# Altium integrated library Ali-padash.IntLib: 1012 symbols (part 3 of 5)
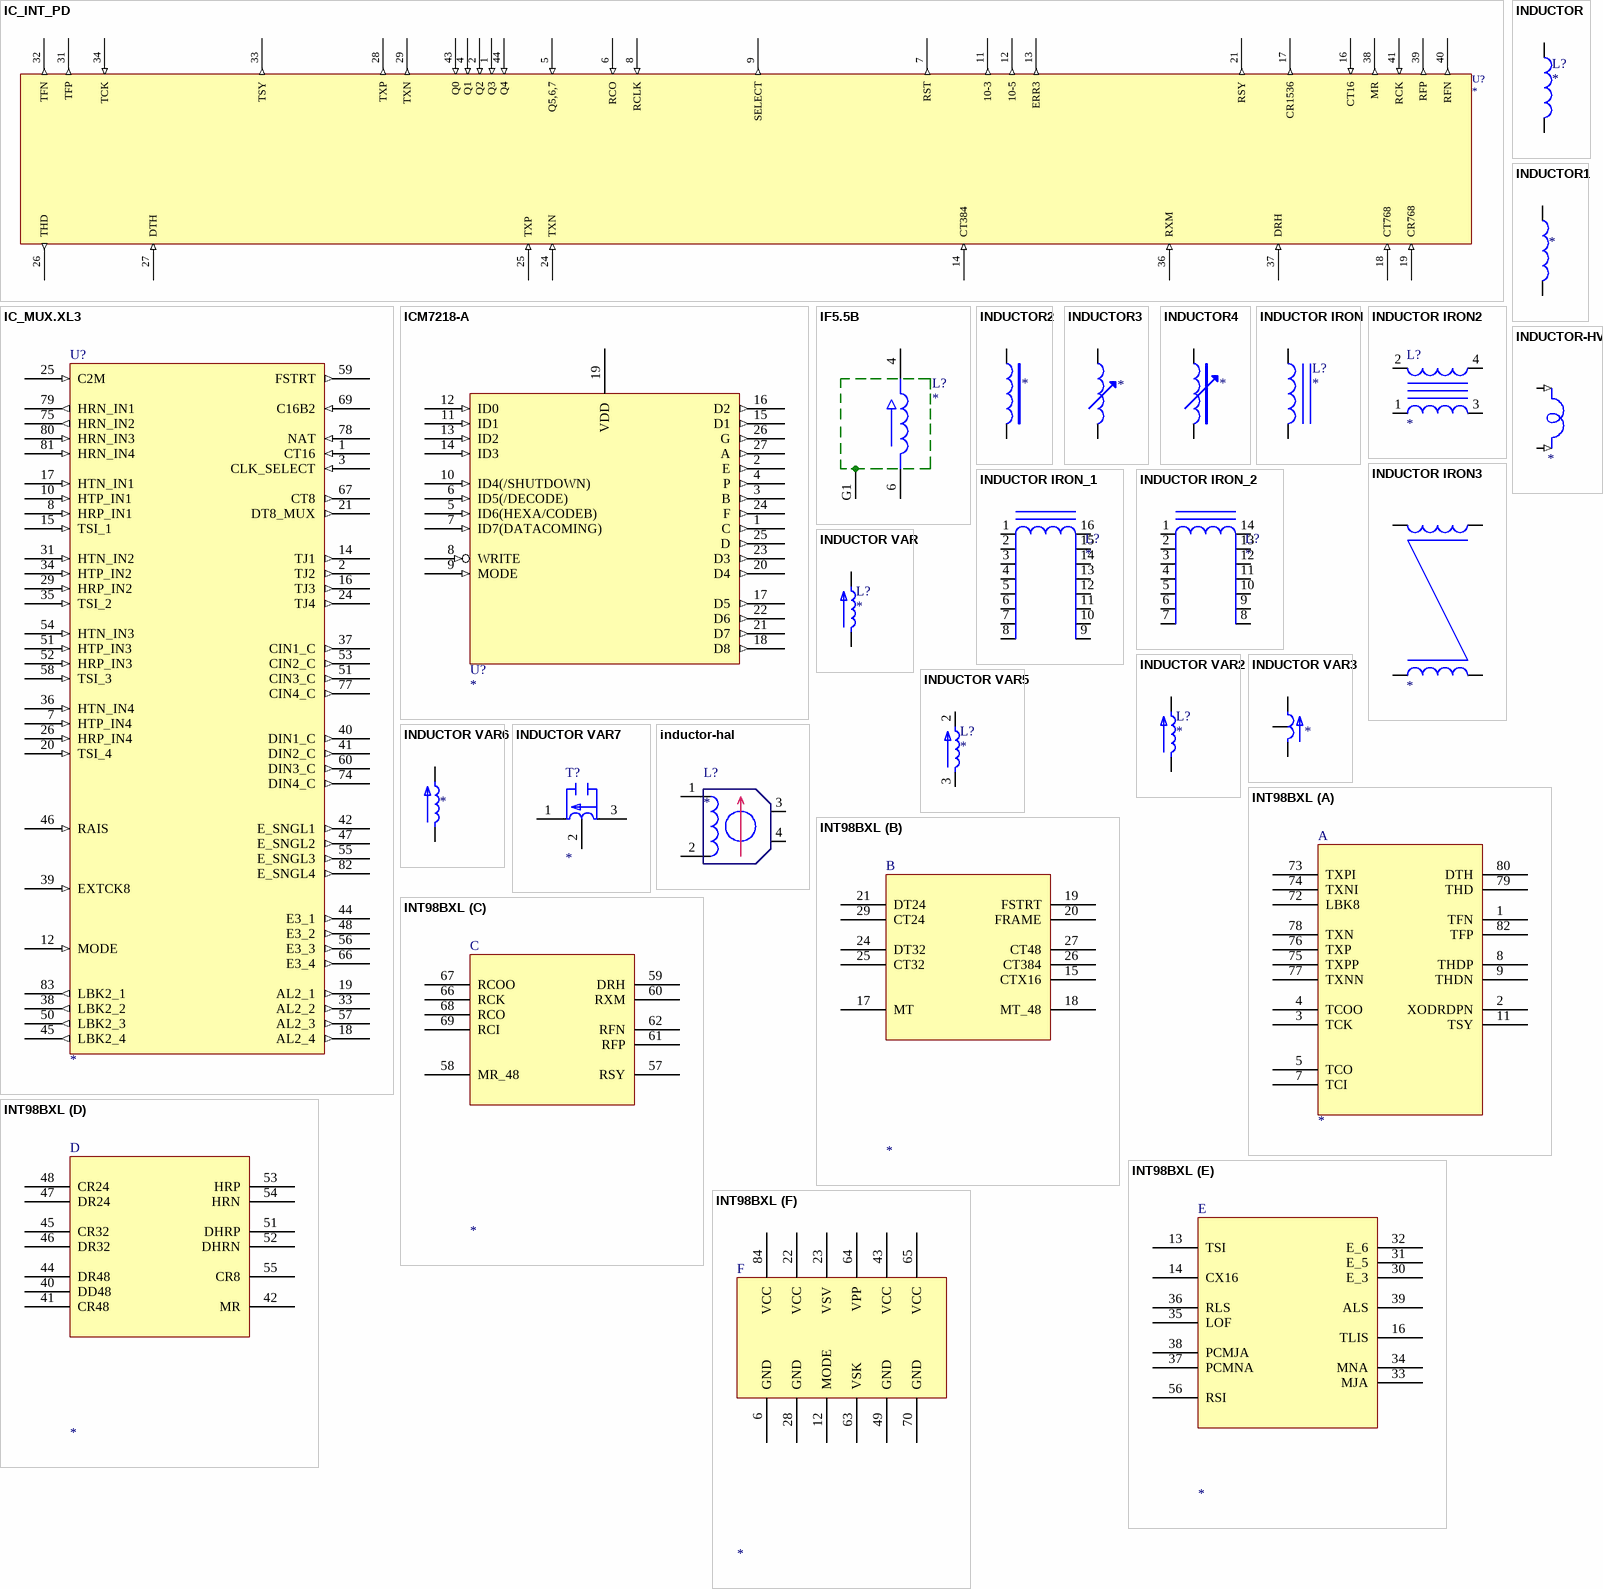
[diagram p81: symbols IC_INT_PD to INT98BXL]

## ICM7218-A
designator U?
pins: 1 C (out), 2 E (out), 3 B (out), 4 P (out), 5 ID6(HEXA/CODEB) (in), 6 ID5(/DECODE) (in), 7 ID7(DATACOMING) (in), 8 WRITE (in), 9 MODE (in), 10 ID4(/SHUTDOWN) (in), 11 ID1 (in), 12 ID0 (in), 13 ID2 (in), 14 ID3 (in), 15 D1 (out), 16 D2 (out), 17 D5 (out), 18 D8 (out), 19 VDD, 20 D4 (out), 21 D7 (out), 22 D6 (out), 23 D3 (out), 24 F (out), 25 D (out), 26 G (out), 27 A (out), 28 VSS (power) hidden to VSS

## IF5.5B
designator L?
pins: 4, 6, G1 GND

## INDUCTOR
designator L?
footprint AXIAL0.3
footprint AXIAL0.4
footprint BEAD
pins: 1, 2

## INDUCTOR1
designator ?
pins: 1, 2

## INDUCTOR2
designator ?
pins: 1, 2

## INDUCTOR3
designator ?
pins: 1, 2

## INDUCTOR4
designator ?
pins: 1, 2

## INDUCTOR IRON
designator L?
pins: 1, 2

## INDUCTOR IRON2
designator L?
pins: 1, 2, 3, 4

## INDUCTOR IRON3
designator ?
pins: 1, 2, 3, 4

## INDUCTOR IRON_1
designator L?
pins: 1, 2, 3, 4, 5, 6, 7, 8, 9, 10, 11, 12, 13, 14, 15, 16

## INDUCTOR IRON_2
designator L?
pins: 1, 2, 3, 4, 5, 6, 7, 8, 9, 10, 11, 12, 13, 14

## INDUCTOR VAR
designator L?
pins: 1, 2

## INDUCTOR VAR2
designator L?
pins: 1, 3

## INDUCTOR VAR3
designator ?
pins: 1, 2, 3

## INDUCTOR VAR5
designator L?
pins: 2, 3

## INDUCTOR VAR6
designator ?
pins: 4, 6

## INDUCTOR VAR7
designator T?
Toko
pins: 1, 2, 3

## inductor-hal
designator L?
footprint tak17
pins: 1, 2, 3, 4

## INDUCTOR-HV
designator ?
pins: 1 (in), 2 (in)

## INT98BXL
designator ?
part A pins: 1 TFN, 2 XODRDPN, 3 TCK, 4 TCOO, 5 TCO, 7 TCI, 8 THDP, 9 THDN, 11 TSY, 72 LBK8, 73 TXPI, 74 TXNI, 75 TXPP, 76 TXP, 77 TXNN, 78 TXN, 79 THD, 80 DTH, 82 TFP
part B pins: 15 CTX16, 17 MT, 18 MT_48, 19 FSTRT, 20 FRAME, 21 DT24, 24 DT32, 25 CT32, 26 CT384, 27 CT48, 29 CT24
part C pins: 57 RSY, 58 MR_48, 59 DRH, 60 RXM, 61 RFP, 62 RFN, 66 RCK, 67 RCOO, 68 RCO, 69 RCI
part D pins: 40 DD48, 41 CR48, 42 MR, 44 DR48, 45 CR32, 46 DR32, 47 DR24, 48 CR24, 51 DHRP, 52 DHRN, 53 HRP, 54 HRN, 55 CR8
part E pins: 13 TSI, 14 CX16, 16 TLIS, 30 E_3, 31 E_5, 32 E_6, 33 MJA, 34 MNA, 35 LOF, 36 RLS, 37 PCMNA, 38 PCMJA, 39 ALS, 56 RSI
part F pins: 6 GND, 12 MODE, 22 VCC, 23 VSV, 28 GND, 43 VCC, 49 GND, 63 VSK, 64 VPP, 65 VCC, 70 GND, 84 VCC

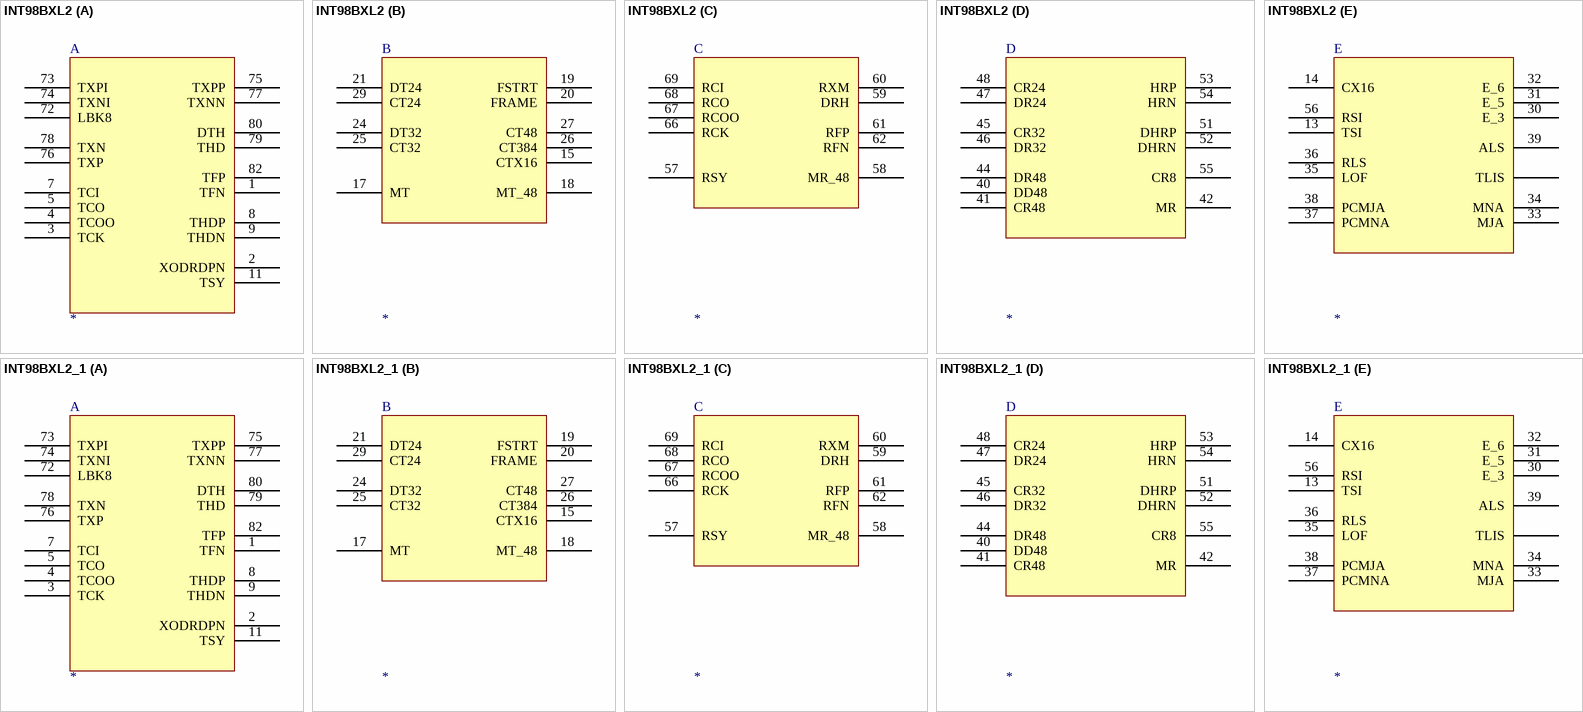
[diagram p31: symbols INT98BXL2 to INT98BXL2_1]

## INT98BXL2
designator ?
part A pins: 1 TFN, 2 XODRDPN, 3 TCK, 4 TCOO, 5 TCO, 7 TCI, 8 THDP, 9 THDN, 11 TSY, 72 LBK8, 73 TXPI, 74 TXNI, 75 TXPP, 76 TXP, 77 TXNN, 78 TXN, 79 THD, 80 DTH, 82 TFP
part B pins: 15 CTX16, 17 MT, 18 MT_48, 19 FSTRT, 20 FRAME, 21 DT24, 24 DT32, 25 CT32, 26 CT384, 27 CT48, 29 CT24
part C pins: 57 RSY, 58 MR_48, 59 DRH, 60 RXM, 61 RFP, 62 RFN, 66 RCK, 67 RCOO, 68 RCO, 69 RCI
part D pins: 40 DD48, 41 CR48, 42 MR, 44 DR48, 45 CR32, 46 DR32, 47 DR24, 48 CR24, 51 DHRP, 52 DHRN, 53 HRP, 54 HRN, 55 CR8
part E pins: 13 TSI, 14 CX16, 30 E_3, 31 E_5, 32 E_6, 33 MJA, 34 MNA, 35 LOF, 36 RLS, 37 PCMNA, 38 PCMJA, 39 ALS, 56 RSI, ? TLIS

## INT98BXL2_1
designator ?
part A pins: 1 TFN, 2 XODRDPN, 3 TCK, 4 TCOO, 5 TCO, 7 TCI, 8 THDP, 9 THDN, 11 TSY, 72 LBK8, 73 TXPI, 74 TXNI, 75 TXPP, 76 TXP, 77 TXNN, 78 TXN, 79 THD, 80 DTH, 82 TFP
part B pins: 15 CTX16, 17 MT, 18 MT_48, 19 FSTRT, 20 FRAME, 21 DT24, 24 DT32, 25 CT32, 26 CT384, 27 CT48, 29 CT24
part C pins: 57 RSY, 58 MR_48, 59 DRH, 60 RXM, 61 RFP, 62 RFN, 66 RCK, 67 RCOO, 68 RCO, 69 RCI
part D pins: 40 DD48, 41 CR48, 42 MR, 44 DR48, 45 CR32, 46 DR32, 47 DR24, 48 CR24, 51 DHRP, 52 DHRN, 53 HRP, 54 HRN, 55 CR8
part E pins: 13 TSI, 14 CX16, 30 E_3, 31 E_5, 32 E_6, 33 MJA, 34 MNA, 35 LOF, 36 RLS, 37 PCMNA, 38 PCMJA, 39 ALS, 56 RSI, ? TLIS

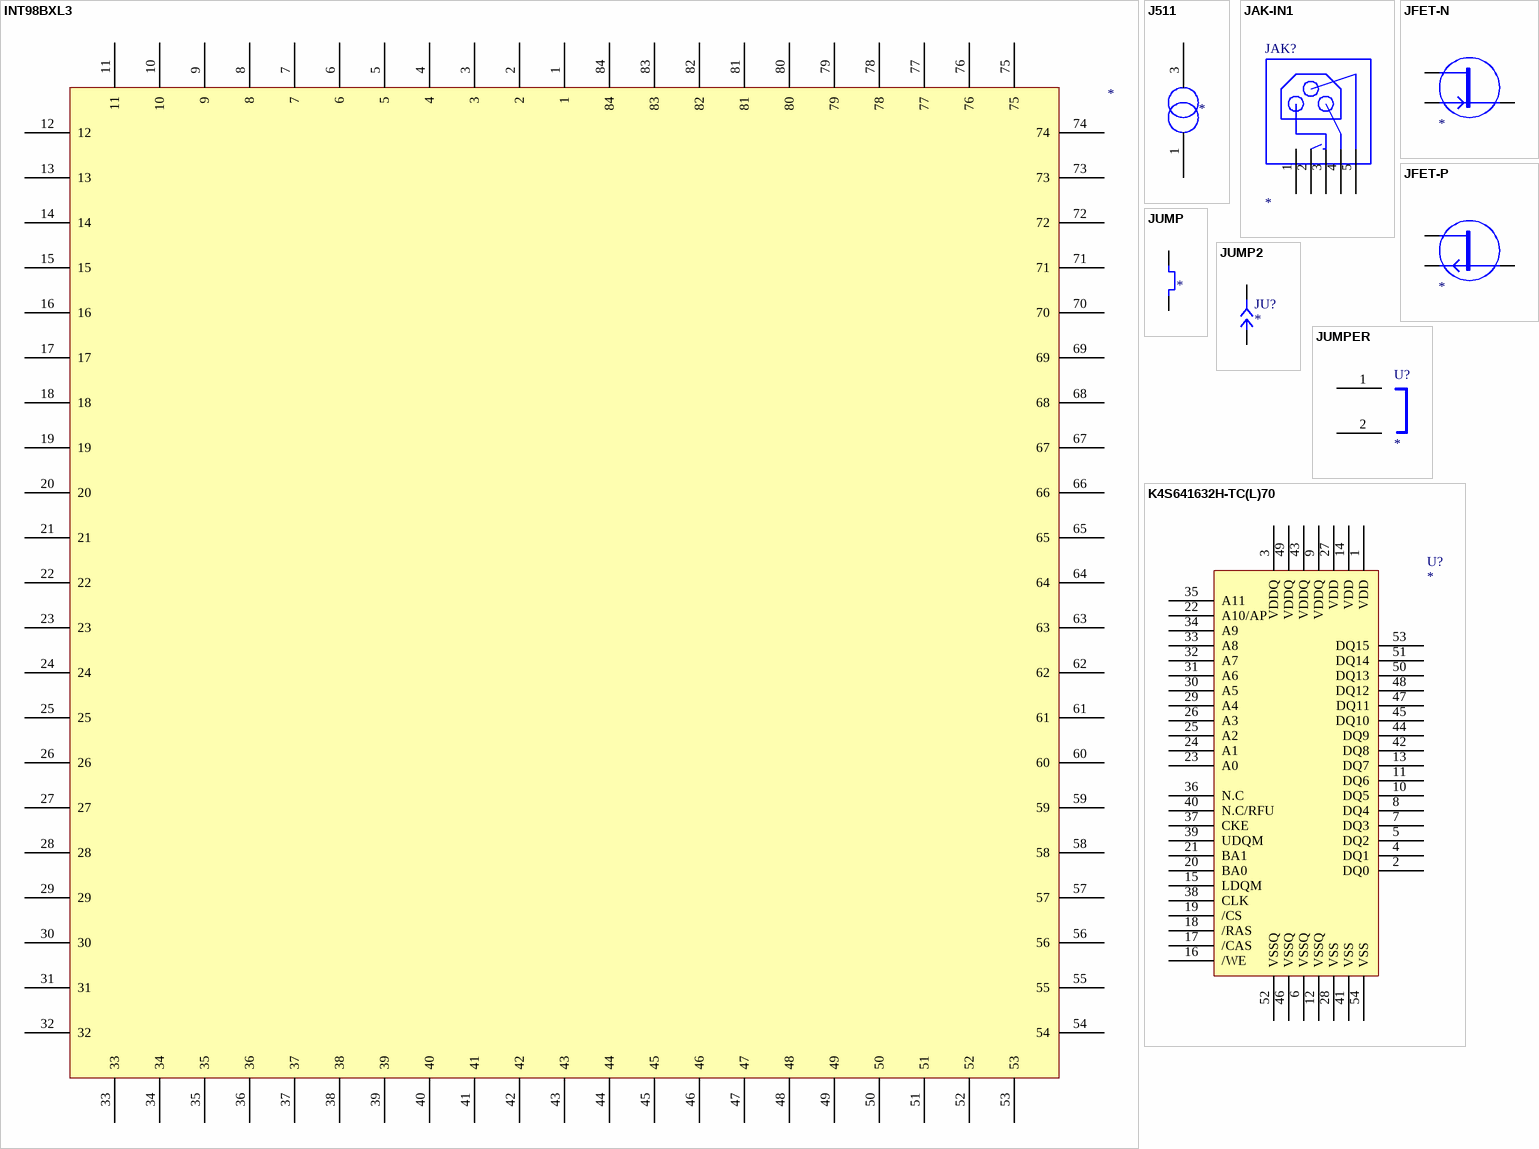
[diagram p32: symbols INT98BXL3 to K4S641632H-TC(L)70]

## INT98BXL3
designator ?
pins: 1, 2, 3, 4, 5, 6, 7, 8, 9, 10, 11, 12, 13, 14, 15, 16, 17, 18, 19, 20, 21, 22, 23, 24, 25, 26, 27, 28, 29, 30, 31, 32, 33, 34, 35, 36, 37, 38, 39, 40, 41, 42, 43, 44, 45, 46, 47, 48, 49, 50, 51, 52, 53, 54, 55, 56, 57, 58, 59, 60, 61, 62, 63, 64, 65, 66, 67, 68, 69, 70, 71, 72, 73, 74, 75, 76, 77, 78, 79, 80, 81, 82, 83, 84

## J511
designator ?
pins: 1, 3

## JAK-IN1
designator JAK?
footprint JAK-PWR1
pins: 1, 2, 3, 4, 5

## JFET-N
designator ?
pins: 1, 2, 3

## JFET-P
designator ?
pins: 1, 2, 3

## JUMP
designator ?
pins: 1, 2

## JUMP2
designator JU?
footprint JUMP3
footprint JUMP2
pins: 1, 2

## JUMPER
designator U?
footprint RAD0.2
pins: 1, 2

## K4S641632H-TC(L)70
designator U?
footprint TSOP54
pins: 1 VDD, 2 DQ0, 3 VDDQ, 4 DQ1, 5 DQ2, 6 VSSQ, 7 DQ3, 8 DQ4, 9 VDDQ, 10 DQ5, 11 DQ6, 12 VSSQ, 13 DQ7, 14 VDD, 15 LDQM, 16 /WE, 17 /CAS, 18 /RAS, 19 /CS, 20 BA0, 21 BA1, 22 A10/AP, 23 A0, 24 A1, 25 A2, 26 A3, 27 VDD, 28 VSS, 29 A4, 30 A5, 31 A6, 32 A7, 33 A8, 34 A9, 35 A11, 36 N.C, 37 CKE, 38 CLK, 39 UDQM, 40 N.C/RFU, 41 VSS, 42 DQ8, 43 VDDQ, 44 DQ9, 45 DQ10, 46 VSSQ, 47 DQ11, 48 DQ12, 49 VDDQ, 50 DQ13, 51 DQ14, 52 VSSQ, 53 DQ15, 54 VSS

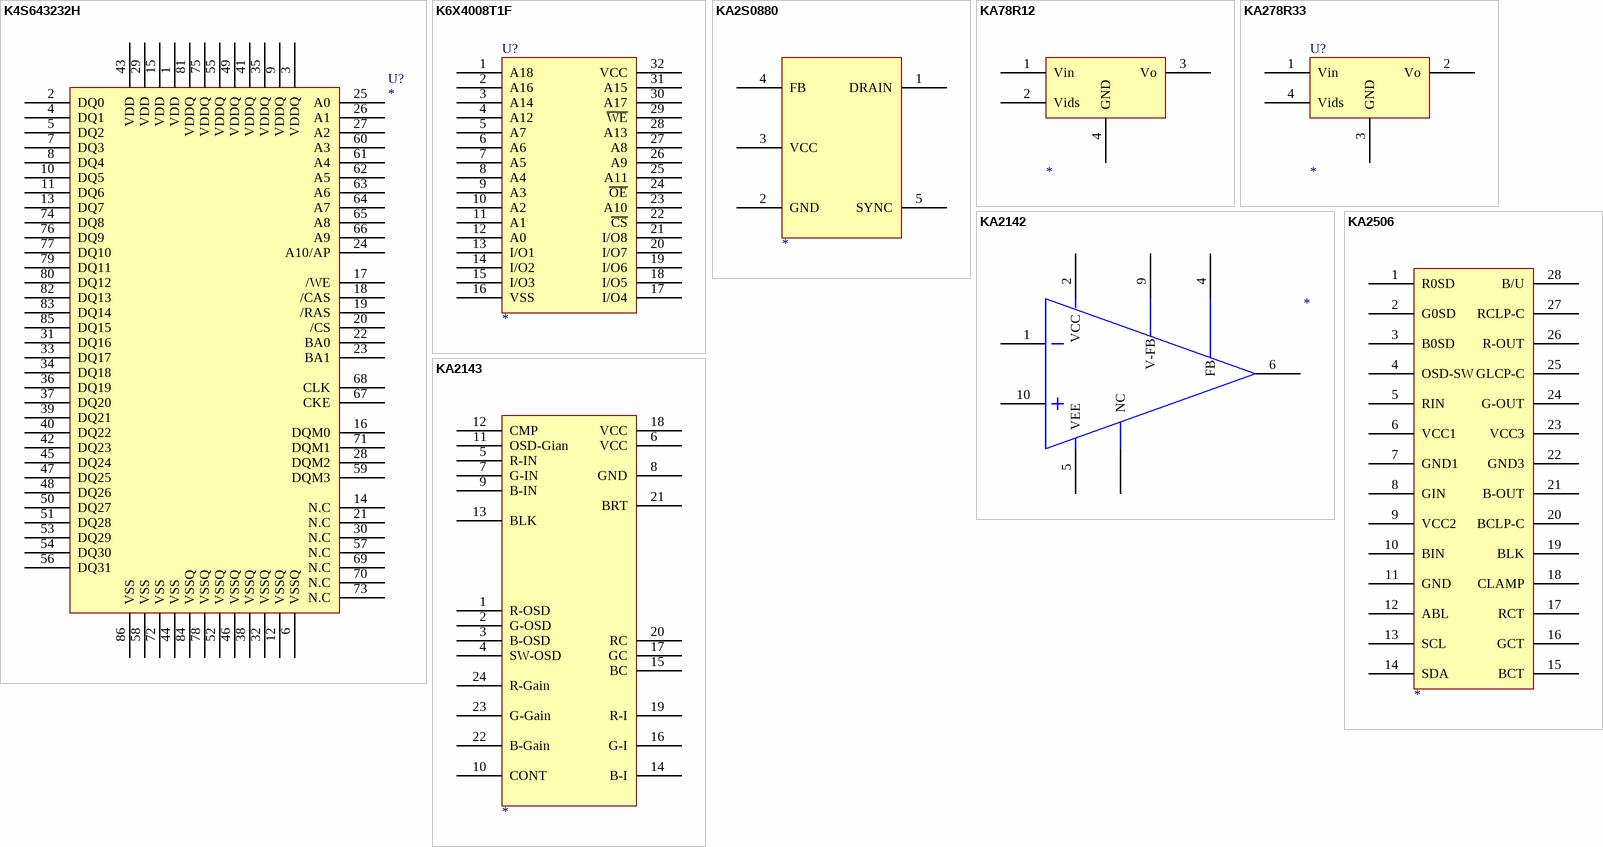
[diagram p33: symbols K4S643232H to KA2506]

## K4S643232H
designator U?
footprint TSOP86
pins: 1 VDD, 2 DQ0, 3 VDDQ, 4 DQ1, 5 DQ2, 6 VSSQ, 7 DQ3, 8 DQ4, 9 VDDQ, 10 DQ5, 11 DQ6, 12 VSSQ, 13 DQ7, 14 N.C, 15 VDD, 16 DQM0, 17 /WE, 18 /CAS, 19 /RAS, 20 /CS, 21 N.C, 22 BA0, 23 BA1, 24 A10/AP, 25 A0, 26 A1, 27 A2, 28 DQM2, 29 VDD, 30 N.C, 31 DQ16, 32 VSSQ, 33 DQ17, 34 DQ18, 35 VDDQ, 36 DQ19, 37 DQ20, 38 VSSQ, 39 DQ21, 40 DQ22, 41 VDDQ, 42 DQ23, 43 VDD, 44 VSS, 45 DQ24, 46 VSSQ, 47 DQ25, 48 DQ26, 49 VDDQ, 50 DQ27, 51 DQ28, 52 VSSQ, 53 DQ29, 54 DQ30, 55 VDDQ, 56 DQ31, 57 N.C, 58 VSS, 59 DQM3, 60 A3, 61 A4, 62 A5, 63 A6, 64 A7, 65 A8, 66 A9, 67 CKE, 68 CLK, 69 N.C, 70 N.C, 71 DQM1, 72 VSS, 73 N.C, 74 DQ8, 75 VDDQ, 76 DQ9, 77 DQ10, 78 VSSQ, 79 DQ11, 80 DQ12, 81 VDDQ, 82 DQ13, 83 DQ14, 84 VSSQ, 85 DQ15, 86 VSS

## K6X4008T1F
designator U?
footprint SOP32
pins: 1 A18, 2 A16, 3 A14, 4 A12, 5 A7, 6 A6, 7 A5, 8 A4, 9 A3, 10 A2, 11 A1, 12 A0, 13 I/O1, 14 I/O2, 15 I/O3, 16 VSS, 17 I/O4, 18 I/O5, 19 I/O6, 20 I/O7, 21 I/O8, 22 ~{CS}, 23 A10, 24 ~{OE}, 25 A11, 26 A9, 27 A8, 28 A13, 29 ~{WE}, 30 A17, 31 A15, 32 VCC

## KA2S0880
designator ?
pins: 1 DRAIN, 2 GND, 3 VCC, 4 FB, 5 SYNC

## KA78R12
designator ?
pins: 1 Vin, 2 Vids, 3 Vo, 4 GND

## KA278R33
designator U?
footprint TO-220F-4L
footprint TO-220F-4LB
footprint TO-220F-4LH
pins: 1 Vin, 2 Vo, 3 GND, 4 Vids

## KA2142
designator ?
pins: 1, 2  VCC  , 3         NC       , 4                FB               , 5    VEE  , 6, 9         V-FB         , 10

## KA2143
designator ?
pins: 1 R-OSD, 2 G-OSD, 3 B-OSD, 4 SW-OSD, 5 R-IN, 6 VCC, 7 G-IN, 8 GND, 9 B-IN, 10 CONT, 11 OSD-Gian, 12 CMP, 13 BLK, 14 B-I, 15 BC, 16 G-I, 17 GC, 18 VCC, 19 R-I, 20 RC, 21 BRT, 22 B-Gain, 23 G-Gain, 24 R-Gain

## KA2506
designator ?
pins: 1 R0SD, 2 G0SD, 3 B0SD, 4 OSD-SW, 5 RIN, 6 VCC1, 7 GND1, 8 GIN, 9 VCC2, 10 BIN, 11 GND, 12 ABL, 13 SCL, 14 SDA, 15 BCT, 16 GCT, 17 RCT, 18 CLAMP, 19 BLK, 20 BCLP-C, 21 B-OUT, 22 GND3, 23 VCC3, 24 G-OUT, 25 GLCP-C, 26 R-OUT, 27 RCLP-C, 28 B/U

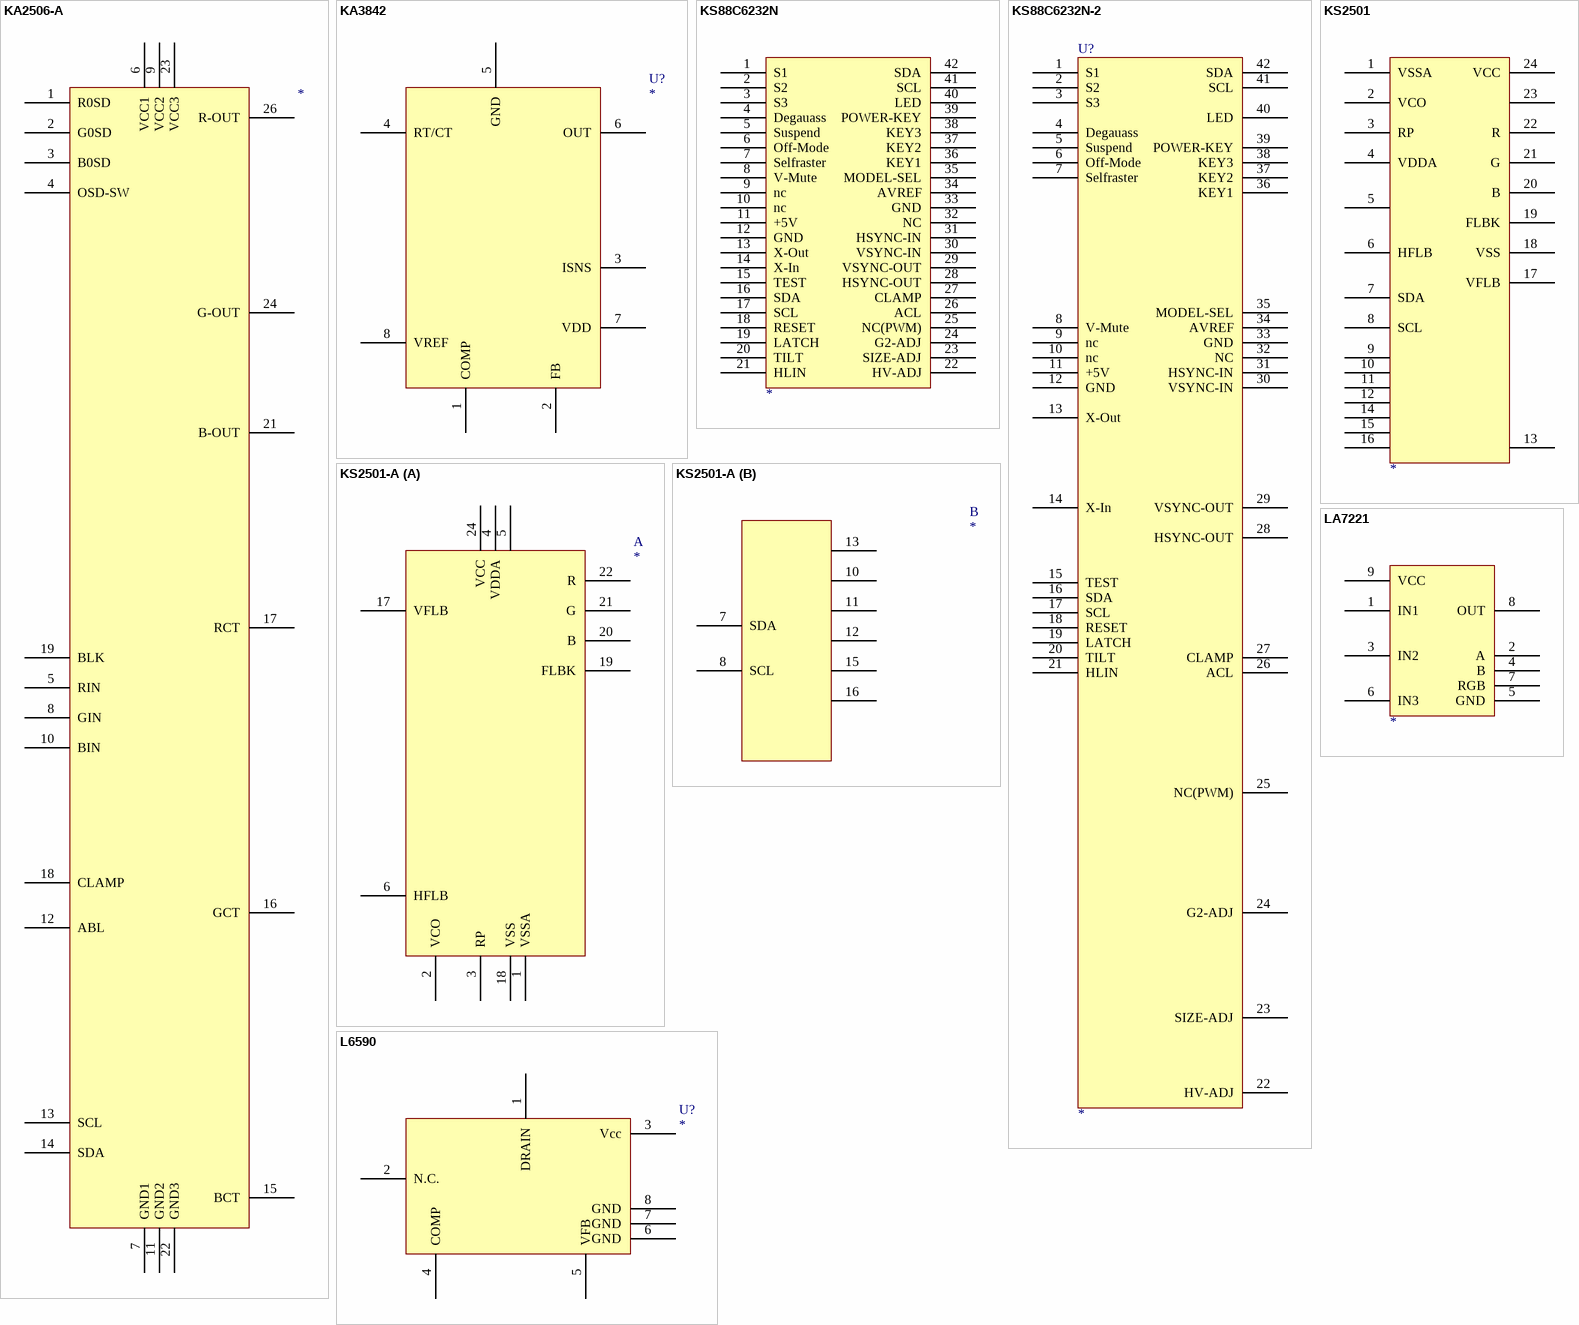
[diagram p34: symbols KA2506-A to LA7221]

## KA2506-A
designator ?
pins: 1 R0SD, 2 G0SD, 3 B0SD, 4 OSD-SW, 5 RIN, 6 VCC1, 7 GND1, 8 GIN, 9 VCC2, 10 BIN, 11 GND2, 12 ABL, 13 SCL, 14 SDA, 15 BCT, 16 GCT, 17 RCT, 18 CLAMP, 19 BLK, 21 B-OUT, 22 GND3, 23 VCC3, 24 G-OUT, 26 R-OUT

## KA3842
designator U?
footprint DIP8
pins: 1 COMP, 2 FB, 3 ISNS, 4 RT/CT, 5 GND, 6 OUT, 7 VDD, 8 VREF

## KS88C6232N
designator ?
pins: 1 S1, 2 S2, 3 S3, 4 Degauass, 5 Suspend, 6 Off-Mode, 7 Selfraster, 8 V-Mute, 9 nc, 10 nc, 11 +5V, 12 GND, 13 X-Out, 14 X-In, 15 TEST, 16 SDA, 17 SCL, 18 RESET, 19 LATCH, 20 TILT, 21 HLIN, 22 HV-ADJ, 23 SIZE-ADJ, 24 G2-ADJ, 25 NC(PWM), 26 ACL, 27 CLAMP, 28 HSYNC-OUT, 29 VSYNC-OUT, 30 VSYNC-IN, 31 HSYNC-IN, 32 NC, 33 GND, 34 AVREF, 35 MODEL-SEL, 36 KEY1, 37 KEY2, 38 KEY3, 39 POWER-KEY, 40 LED, 41 SCL, 42 SDA

## KS88C6232N-2
designator U?
pins: 1 S1, 2 S2, 3 S3, 4 Degauass, 5 Suspend, 6 Off-Mode, 7 Selfraster, 8 V-Mute, 9 nc, 10 nc, 11 +5V, 12 GND, 13 X-Out, 14 X-In, 15 TEST, 16 SDA, 17 SCL, 18 RESET, 19 LATCH, 20 TILT, 21 HLIN, 22 HV-ADJ, 23 SIZE-ADJ, 24 G2-ADJ, 25 NC(PWM), 26 ACL, 27 CLAMP, 28 HSYNC-OUT, 29 VSYNC-OUT, 30 VSYNC-IN, 31 HSYNC-IN, 32 NC, 33 GND, 34 AVREF, 35 MODEL-SEL, 36 KEY1, 37 KEY2, 38 KEY3, 39 POWER-KEY, 40 LED, 41 SCL, 42 SDA

## KS2501
designator ?
pins: 1 VSSA, 2 VCO, 3 RP, 4 VDDA, 5, 6 HFLB, 7 SDA, 8 SCL, 9, 10, 11, 12, 13, 14, 15, 16, 17 VFLB, 18 VSS, 19 FLBK, 20 B, 21 G, 22 R, 23, 24 VCC

## KS2501-A
designator ?
part A pins: 1 VSSA, 2 VCO, 3 RP, 4 VDDA, 5, 6 HFLB, 17 VFLB, 18 VSS, 19 FLBK, 20 B, 21 G, 22 R, 24 VCC
part B pins: 7 SDA, 8 SCL, 10, 11, 12, 13, 15, 16

## L6590
designator U?
footprint DIP8
pins: 1 DRAIN, 2 N.C., 3 Vcc, 4 COMP, 5 VFB, 6 GND, 7 GND, 8 GND

## LA7221
designator ?
U?
pins: 1 IN1, 2 A, 3 IN2, 4 B, 5 GND (power), 6 IN3, 7 RGB, 8 OUT, 9 VCC (power)

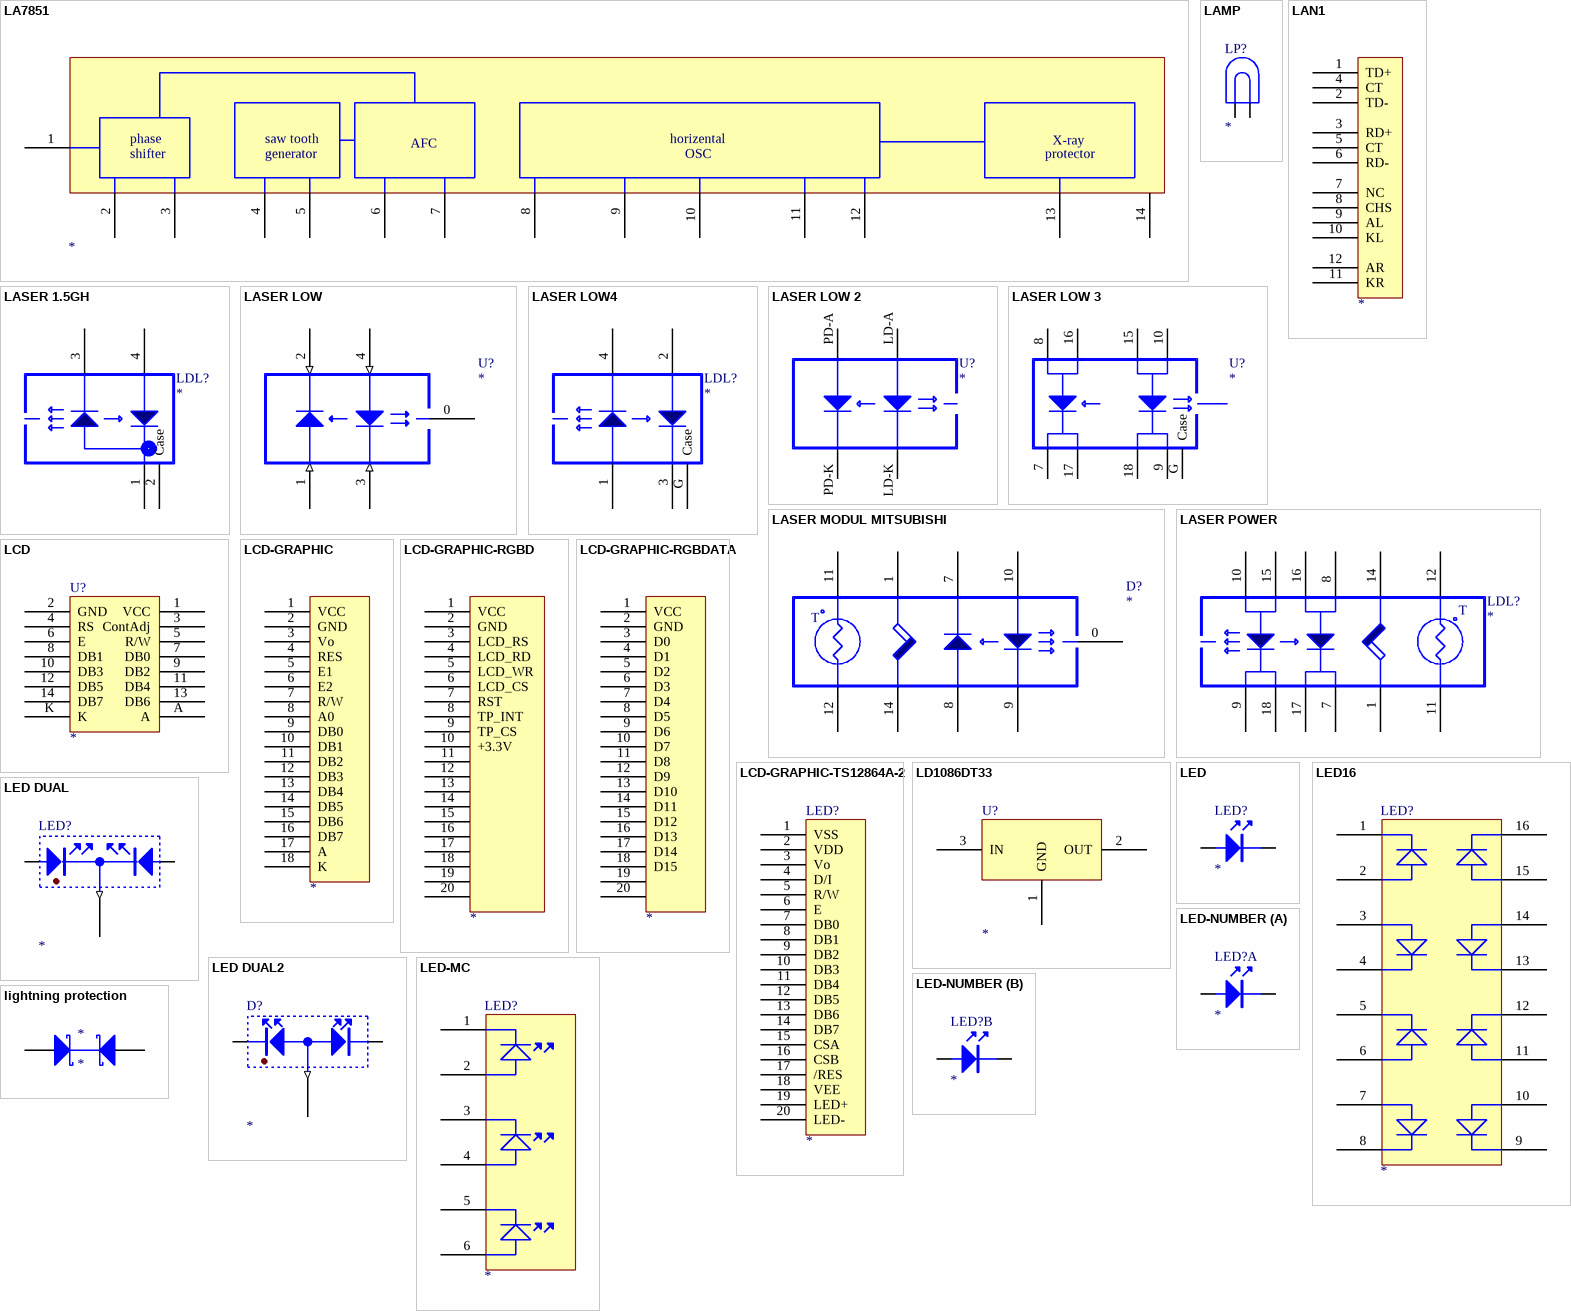
[diagram p35: symbols LA7851 to lightning protection]

## LA7851
designator ?
pins: 1, 2, 3, 4, 5, 6, 7, 8, 9, 10, 11, 12, 13, 14
text: phase; saw tooth; horizental; X-ray; AFC; shifter; generator; OSC; protector

## LAMP
designator LP?
pins: 1, 2

## LAN1
designator ?
pins: 1 TD+, 2 TD-, 3 RD+, 4 CT, 5 CT, 6 RD-, 7 NC, 8 CHS, 9 AL, 10 KL, 11 KR, 12 AR

## LASER 1.5GH
designator LDL?
footprint LDHP2
pins: 1, 2 Case, 3, 4

## LASER LOW
designator U?
pins: 0, 1 PA (in), 2 PH-K (in), 3 KATODE (in), 4 ANODE (in)

## LASER LOW4
designator LDL?
footprint LDHP2
pins: 1, 2, 3, 4, G Case

## LASER LOW 2
designator U?
pins: LD-A, LD-K, PD-A, PD-K

## LASER LOW 3
designator U?
pins: 7, 8, 9, 10, 15 LD-A, 16 PD-K, 17 PD-A, 18 LD-K, G Case

## LASER MODUL MITSUBISHI
designator D?
pins: 0, 1 +COLLER, 7 CATHODE PH.DET, 8 ANODE PH.DET, 9 CATHODE LASER, 10 ANODE LASER, 11 TERMISTOR, 12 TERMISTOR, 14 -COLLER
text: T

## LASER POWER
designator LDL?
pins: 1, 7, 8, 9, 10, 11, 12, 14, 15, 16, 17, 18
text: T

## LCD
designator U?
footprint LCD1
pins: 1 VCC, 2 GND, 3 ContAdj, 4 RS, 5 R/W, 6 E, 7 DB0, 8 DB1, 9 DB2, 10 DB3, 11 DB4, 12 DB5, 13 DB6, 14 DB7, A, K

## LCD-GRAPHIC
designator ?
pins: 1 VCC, 2 GND, 3 Vo, 4 RES, 5 E1, 6 E2, 7 R/W, 8 A0, 9 DB0, 10 DB1, 11 DB2, 12 DB3, 13 DB4, 14 DB5, 15 DB6, 16 DB7, 17 A, 18 K

## LCD-GRAPHIC-RGBD
designator ?
pins: 1 VCC, 2 GND, 3 LCD_RS, 4 LCD_RD, 5 LCD_WR, 6 LCD_CS, 7 RST, 8 TP_INT, 9 TP_CS, 10 +3.3V, 11, 12, 13, 14, 15, 16, 17, 18, 19, 20

## LCD-GRAPHIC-RGBDATA
designator ?
pins: 1 VCC, 2 GND, 3 D0, 4 D1, 5 D2, 6 D3, 7 D4, 8 D5, 9 D6, 10 D7, 11 D8, 12 D9, 13 D10, 14 D11, 15 D12, 16 D13, 17 D14, 18 D15, 19, 20

## LCD-GRAPHIC-TS12864A-2
designator LED?
pins: 1 VSS, 2 VDD, 3 Vo, 4 D/I, 5 R/W, 6 E, 7 DB0, 8 DB1, 9 DB2, 10 DB3, 11 DB4, 12 DB5, 13 DB6, 14 DB7, 15 CSA, 16 CSB, 17 /RES, 18 VEE, 19 LED+, 20 LED-

## LD1086DT33
designator U?
footprint TO-252
pins: 1 GND, 2 OUT, 3 IN

## LED
designator LED?
footprint LEDR-2
footprint LED1R3
pins: A, K

## LED16
designator LED?
footprint DIP16
pins: 1, 2, 3, 4, 5, 6, 7, 8, 9, 10, 11, 12, 13, 14, 15, 16

## LED DUAL
designator LED?
footprint LED2RA3
footprint LED2RA5
pins: A, AR, K (out)

## LED DUAL2
designator D?
footprint LED2R5
pins: A, AR, K (out)

## LED-MC
designator LED?
footprint LED-MC
pins: 1, 2, 3, 4, 5, 6

## LED-NUMBER
designator LED?
footprint LEDR-2
footprint LED1R3
part A pins: 1, 2
part B pins: 3, 4

## lightning protection
designator *
pins: 1 A1, 2 A2

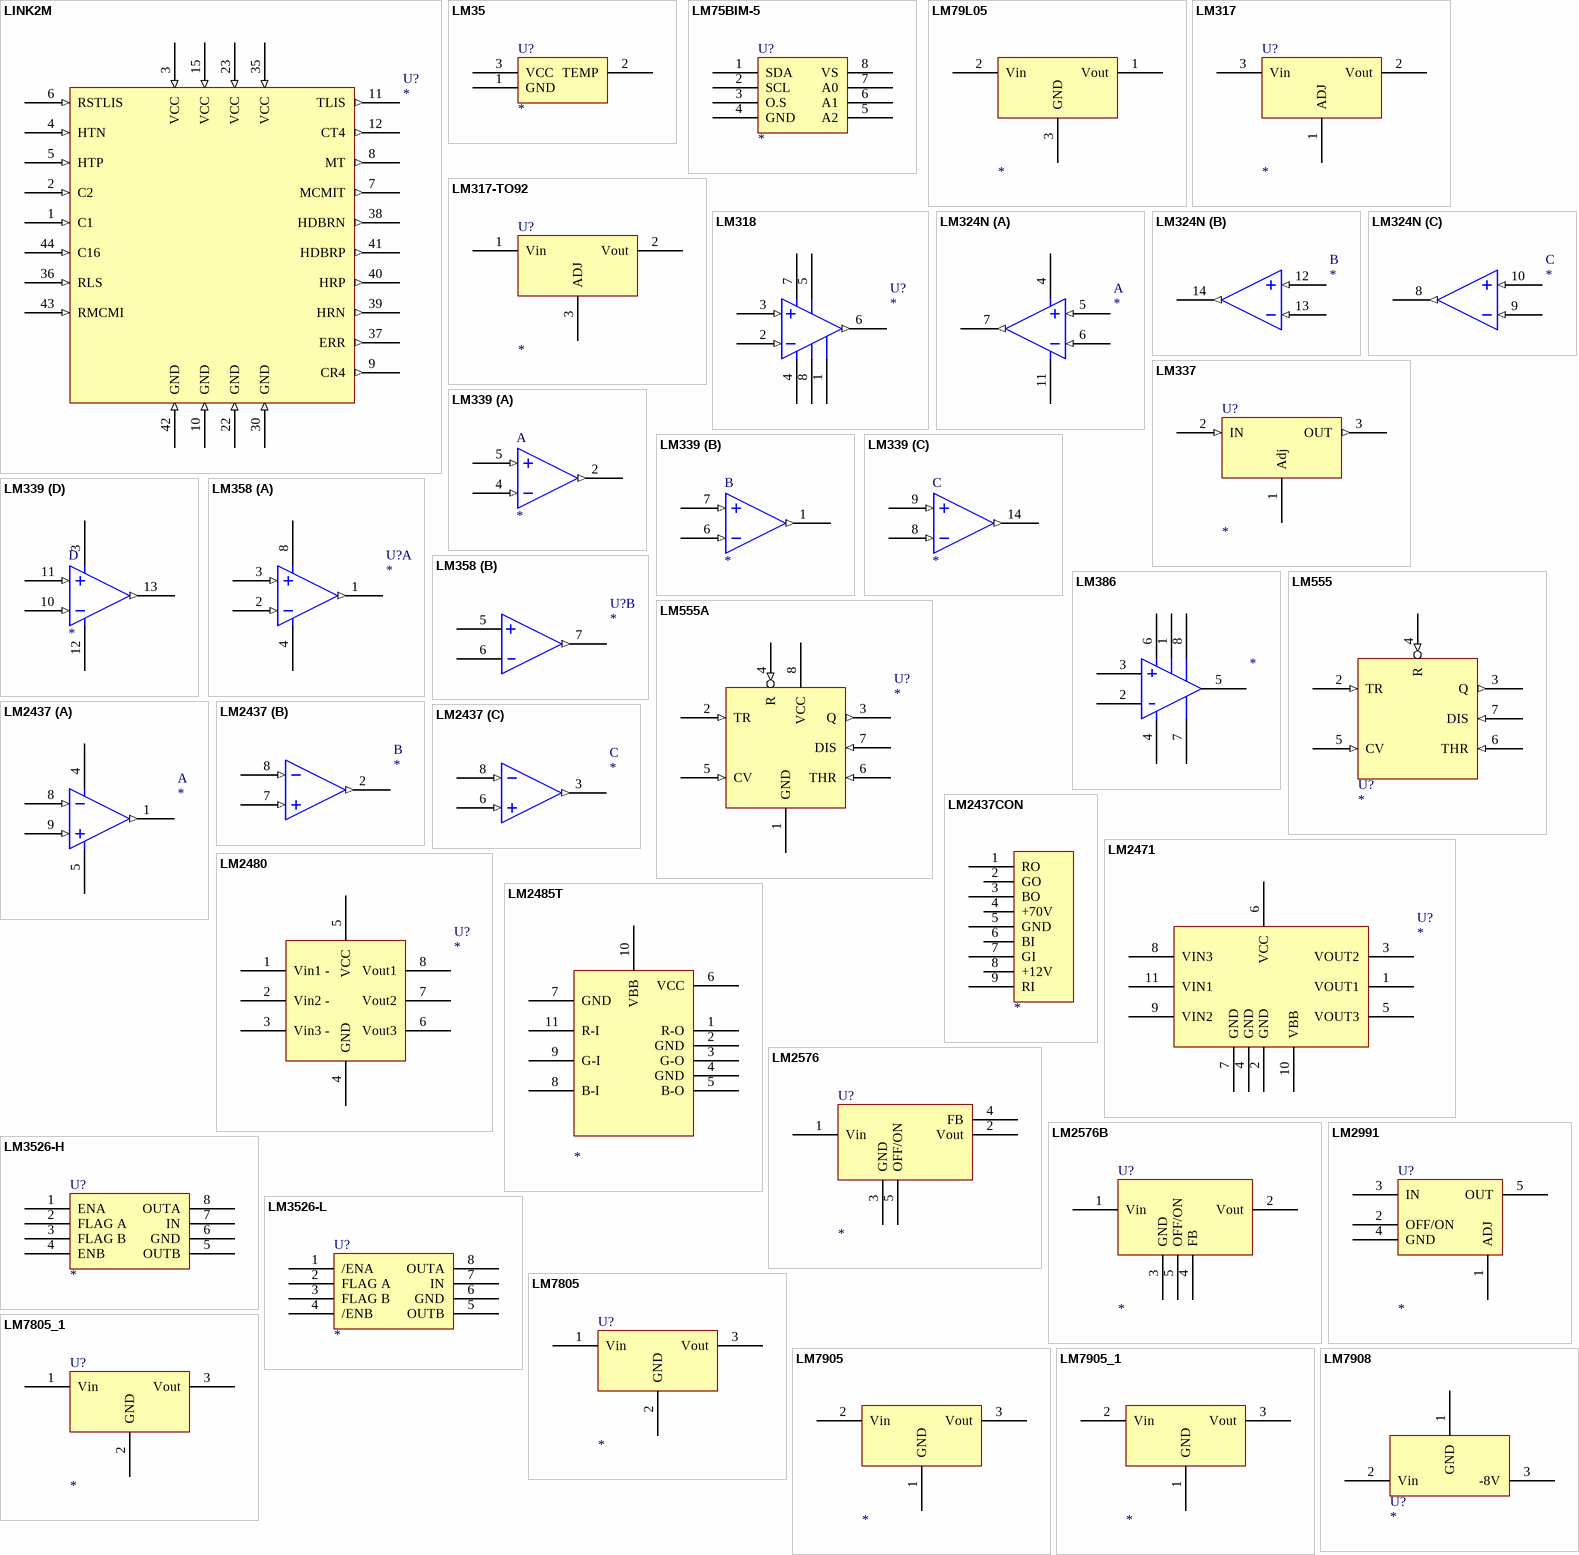
[diagram p36: symbols LINK2M to LM7908]

## LINK2M
designator U?
pins: 1 C1 (in), 2 C2 (in), 3 VCC (in), 4 HTN (in), 5 HTP (in), 6 RSTLIS (in), 7 MCMIT (out), 8 MT (out), 9 CR4 (out), 10 GND (in), 11 TLIS (out), 12 CT4 (out), 15 VCC (in), 22 GND (in), 23 VCC (in), 30 GND (in), 35 VCC (in), 36 RLS (in), 37 ERR (out), 38 HDBRN (out), 39 HRN (out), 40 HRP (out), 41 HDBRP (out), 42 GND (in), 43 RMCMI (in), 44 C16 (in)

## LM35
designator U?
footprint TO-92
pins: 1 GND, 2 TEMP, 3 VCC

## LM75BIM-5
designator U?
footprint SO-8
pins: 1 SDA, 2 SCL, 3 O.S, 4 GND, 5 A2, 6 A1, 7 A0, 8 VS

## LM79L05
designator ?
pins: 1 Vout, 2 Vin, 3 GND

## LM317
designator U?
footprint TO-220A
pins: 1 ADJ, 2 Vout, 3 Vin

## LM317-TO92
designator U?
footprint TO-92
pins: 1 Vin, 2 Vout, 3 ADJ

## LM318
designator U?
pins: 1 COMP3, 2 -IN (in), 3 +IN (in), 4 V-, 5 COMP1, 6 OUT (out), 7 V+, 8 COMP2

## LM324N
designator ?
part A pins: 4 V+, 5 Q1 (in), 6 Q2 (in), 7 D1 (out), 11 V-
part B pins: 12 Q1 (in), 13 Q2 (in), 14 D1 (out)
part C pins: 8 D1 (out), 9 Q2 (in), 10 (in)

## LM337
designator U?
pins: 1 Adj, 2 IN (in), 3 OUT (out)

## LM339
designator ?
part A pins: 2 OUT (out), 4 -IN (in), 5 +IN (in)
part B pins: 1 OUT (out), 6 -IN (in), 7 +IN (in)
part C pins: 8 -IN (in), 9 +IN (in), 14 OUT (out)
part D pins: 3 V-, 10 -IN (in), 11 +IN (in), 12 V+, 13 OUT (out)

## LM358
designator U?
footprint SO-8
footprint DIP8
part A pins: 1 OUT (out), 2 -IN (in), 3 +IN (in), 4 V+, 8 V-
part B pins: 5, 6, 7 OUT (out)

## LM386
designator ?
pins: 1, 2, 3, 4, 5, 6, 7, 8

## LM555
designator U?
pins: 1 GND (power) hidden to GND, 2 TR (in), 3 Q (out), 4 R (in), 5 CV (in), 6 THR (in), 7 DIS (in), 8 VCC (power) hidden to VCC

## LM555A
designator U?
pins: 1 GND (power), 2 TR (in), 3 Q (out), 4 R (in), 5 CV (in), 6 THR (in), 7 DIS (in), 8 VCC (power)

## LM2437
designator ?
part A pins: 1 D1 (out), 4 V-, 5 V+, 8 Q2 (in), 9 Q1 (in)
part B pins: 2 D1 (out), 7 Q1 (in), 8 Q2 (in)
part C pins: 3 D1 (out), 6 Q1 (in), 8 Q2 (in)

## LM2437CON
designator ?
pins: 1 RO, 2 GO, 3 BO, 4 +70V, 5 GND, 6 BI, 7 GI, 8 +12V, 9 RI

## LM2471
designator U?
pins: 1 VOUT1, 2 GND, 3 VOUT2, 4 GND, 5 VOUT3, 6 VCC, 7 GND, 8 VIN3, 9 VIN2, 10 VBB, 11 VIN1

## LM2480
designator U?
pins: 1 Vin1 -, 2 Vin2 -, 3 Vin3 -, 4 GND, 5 VCC, 6 Vout3, 7 Vout2, 8 Vout1

## LM2485T
designator ?
pins: 1 R-O, 2 GND, 3 G-O, 4 GND, 5 B-O, 6 VCC, 7 GND, 8 B-I, 9 G-I, 10 VBB, 11 R-I

## LM2576
designator U?
footprint TO-220F-5L
pins: 1 Vin, 2 Vout, 3 GND, 4 FB, 5 OFF/ON

## LM2576B
designator U?
footprint TO-220F-5L
pins: 1 Vin, 2 Vout, 3 GND, 4 FB, 5 OFF/ON

## LM2991
designator U?
footprint TO-220F-5L
pins: 1 ADJ, 2 OFF/ON, 3 IN, 4 GND, 5 OUT

## LM3526-H
designator U?
footprint SO-8
pins: 1 ENA, 2 FLAG A, 3 FLAG B, 4 ENB, 5 OUTB, 6 GND, 7 IN, 8 OUTA

## LM3526-L
designator U?
footprint SO-8
pins: 1 /ENA, 2 FLAG A, 3 FLAG B, 4 /ENB, 5 OUTB, 6 GND, 7 IN, 8 OUTA

## LM7805
designator U?
footprint TO-92
footprint TO-220A
footprint TO-220
pins: 1 Vin, 2 GND, 3 Vout

## LM7805_1
designator U?
footprint TO-92
footprint TO-220
footprint TO-220A
footprint TO-3
pins: 1 Vin, 2 GND, 3 Vout

## LM7905
designator ?
pins: 1 GND, 2 Vin, 3 Vout

## LM7905_1
designator ?
pins: 1 GND, 2 Vin, 3 Vout

## LM7908
designator U?
footprint TO220
pins: 1 GND, 2 Vin, 3 -8V

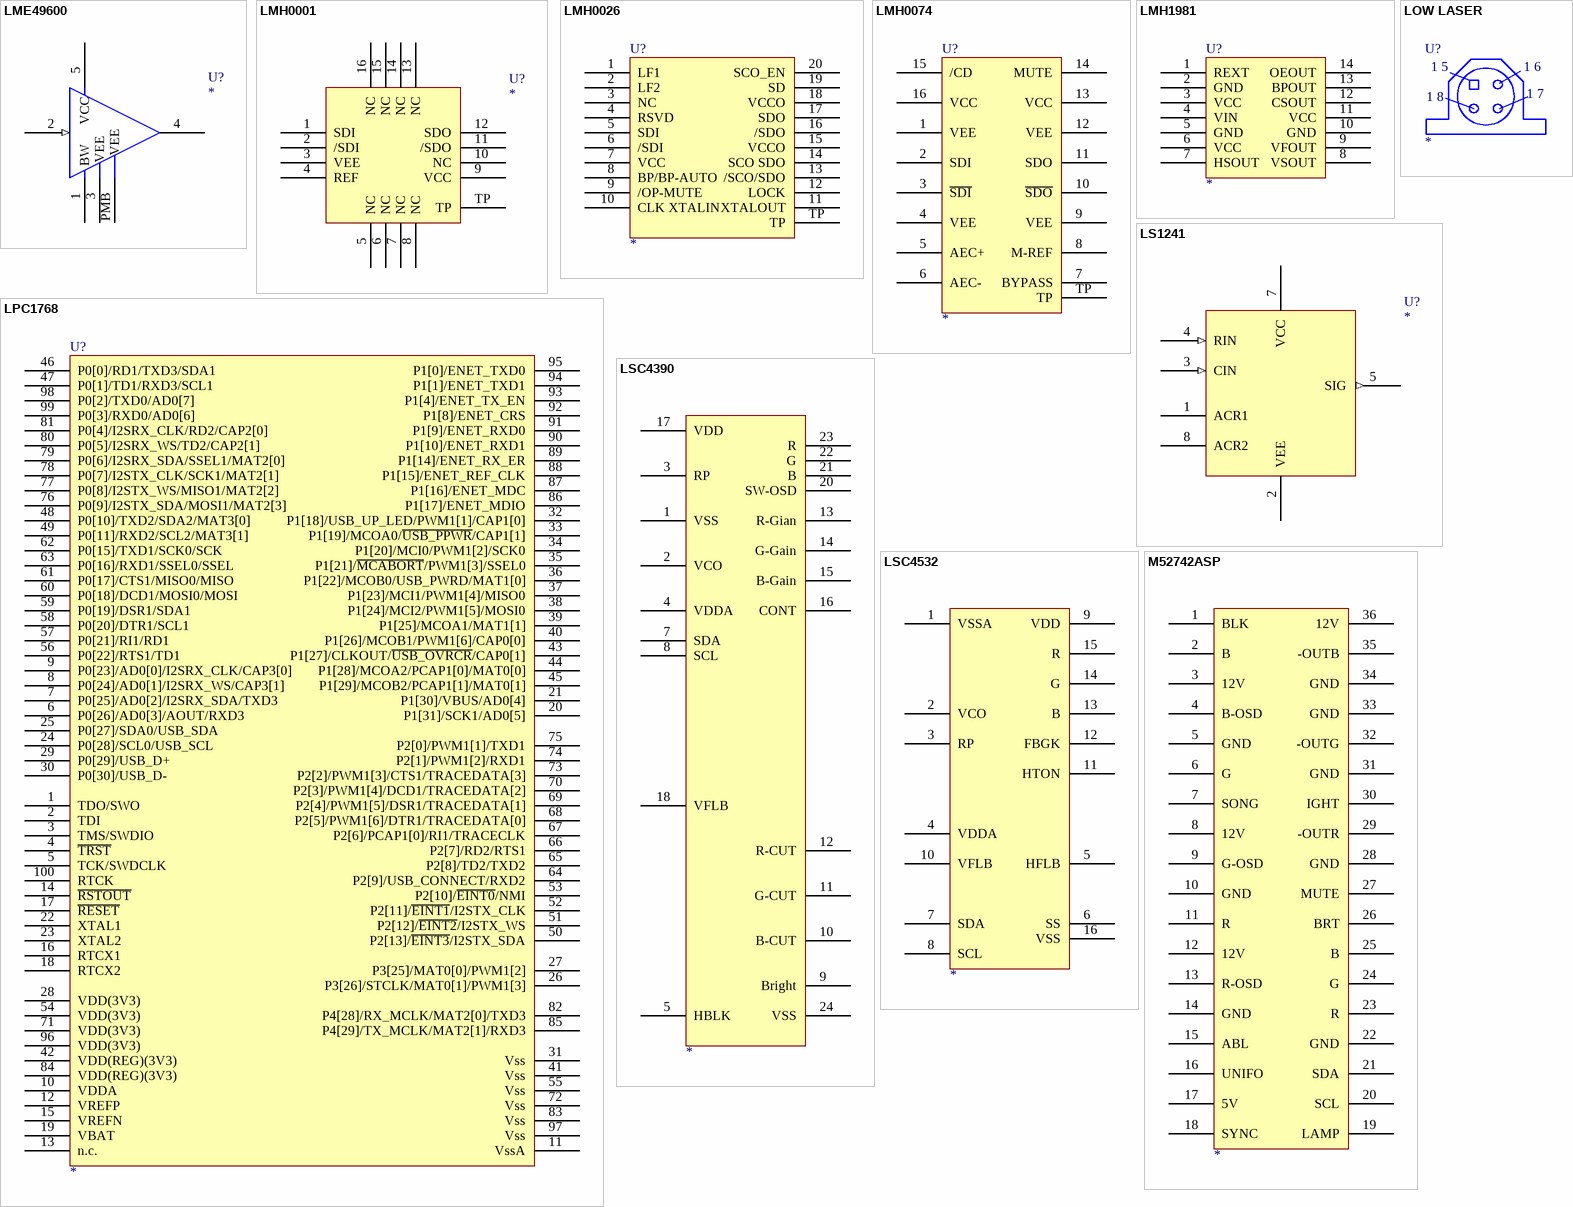
[diagram p37: symbols LME49600 to M52742ASP]

## LME49600
designator U?
footprint TS5B
pins: 1  BW, 2 (in), 3   VEE, 4, 5 VCC, PMB     VEE

## LMH0001
designator U?
footprint QFN16
pins: 1 SDI, 2 /SDI, 3 VEE, 4 REF, 5 NC, 6 NC, 7 NC, 8 NC, 9 VCC, 10 NC, 11 /SDO, 12 SDO, 13 NC, 14 NC, 15 NC, 16 NC, TP

## LMH0026
designator U?
footprint TSSOP20
pins: 1 LF1, 2 LF2, 3 NC, 4 RSVD, 5 SDI, 6 /SDI, 7 VCC, 8 BP/BP-AUTO, 9 /OP-MUTE, 10 CLK XTALIN, 11 XTALOUT, 12 LOCK, 13 /SCO/SDO, 14 SCO SDO, 15 VCCO, 16 /SDO, 17 SDO, 18 VCCO, 19 SD, 20 SCO_EN, TP

## LMH0074
designator U?
footprint QFN16
pins: 1 VEE, 2 SDI, 3 ~{SDI}, 4 VEE, 5 AEC+, 6 AEC-, 7 BYPASS, 8 M-REF, 9 VEE, 10 ~{SDO}, 11 SDO, 12 VEE, 13 VCC, 14 MUTE, 15 /CD, 16 VCC, TP

## LMH1981
designator U?
footprint TSS-14
pins: 1 REXT, 2 GND, 3 VCC, 4 VIN, 5 GND, 6 VCC, 7 HSOUT, 8 VSOUT, 9 VFOUT, 10 GND, 11 VCC, 12 CSOUT, 13 BPOUT, 14 OEOUT

## LOW LASER
designator U?
text: 1 5; 1 6; 1 8; 1 7

## LPC1768
designator U?
footprint LQFP100
pins: 1 TDO/SWO, 2 TDI, 3 TMS/SWDIO, 4 ~{TRST}, 5 TCK/SWDCLK, 6 P0[26]/AD0[3]/AOUT/RXD3, 7 P0[25]/AD0[2]/I2SRX_SDA/TXD3, 8 P0[24]/AD0[1]/I2SRX_WS/CAP3[1], 9 P0[23]/AD0[0]/I2SRX_CLK/CAP3[0], 10 VDDA, 11 VssA, 12 VREFP, 13 n.c., 14 ~{RSTOUT}, 15 VREFN, 16 RTCX1, 17 ~{RESET}, 18 RTCX2, 19 VBAT, 20 P1[31]/SCK1/AD0[5], 21 P1[30]/VBUS/AD0[4], 22 XTAL1, 23 XTAL2, 24 P0[28]/SCL0/USB_SCL, 25 P0[27]/SDA0/USB_SDA, 26 P3[26]/STCLK/MAT0[1]/PWM1[3], 27 P3[25]/MAT0[0]/PWM1[2], 28 VDD(3V3), 29 P0[29]/USB_D+, 30 P0[30]/USB_D-, 31 Vss, 32 P1[18]/USB_UP_LED/PWM1[1]/CAP1[0], 33 P1[19]/MCOA0/~{USB_PPWR}/CAP1[1], 34 P1[20]/MCI0/PWM1[2]/SCK0, 35 P1[21]/~{MCABORT}/PWM1[3]/SSEL0, 36 P1[22]/MCOB0/USB_PWRD/MAT1[0], 37 P1[23]/MCI1/PWM1[4]/MISO0, 38 P1[24]/MCI2/PWM1[5]/MOSI0, 39 P1[25]/MCOA1/MAT1[1], 40 P1[26]/MCOB1/PWM1[6]/CAP0[0], 41 Vss, 42 VDD(REG)(3V3), 43 P1[27]/CLKOUT/~{USB_OVRCR}/CAP0[1], 44 P1[28]/MCOA2/PCAP1[0]/MAT0[0], 45 P1[29]/MCOB2/PCAP1[1]/MAT0[1], 46 P0[0]/RD1/TXD3/SDA1, 47 P0[1]/TD1/RXD3/SCL1, 48 P0[10]/TXD2/SDA2/MAT3[0], 49 P0[11]/RXD2/SCL2/MAT3[1], 50 P2[13]/~{EINT3}/I2STX_SDA, 51 P2[12]/~{EINT2}/I2STX_WS, 52 P2[11]/~{EINT1}/I2STX_CLK, 53 P2[10]/~{EINT0}/NMI, 54 VDD(3V3), 55 Vss, 56 P0[22]/RTS1/TD1, 57 P0[21]/RI1/RD1, 58 P0[20]/DTR1/SCL1, 59 P0[19]/DSR1/SDA1, 60 P0[18]/DCD1/MOSI0/MOSI, 61 P0[17]/CTS1/MISO0/MISO, 62 P0[15]/TXD1/SCK0/SCK, 63 P0[16]/RXD1/SSEL0/SSEL, 64 P2[9]/USB_CONNECT/RXD2, 65 P2[8]/TD2/TXD2, 66 P2[7]/RD2/RTS1, 67 P2[6]/PCAP1[0]/RI1/TRACECLK, 68 P2[5]/PWM1[6]/DTR1/TRACEDATA[0], 69 P2[4]/PWM1[5]/DSR1/TRACEDATA[1], 70 P2[3]/PWM1[4]/DCD1/TRACEDATA[2], 71 VDD(3V3), 72 Vss, 73 P2[2]/PWM1[3]/CTS1/TRACEDATA[3], 74 P2[1]/PWM1[2]/RXD1, 75 P2[0]/PWM1[1]/TXD1, 76 P0[9]/I2STX_SDA/MOSI1/MAT2[3], 77 P0[8]/I2STX_WS/MISO1/MAT2[2], 78 P0[7]/I2STX_CLK/SCK1/MAT2[1], 79 P0[6]/I2SRX_SDA/SSEL1/MAT2[0], 80 P0[5]/I2SRX_WS/TD2/CAP2[1], 81 P0[4]/I2SRX_CLK/RD2/CAP2[0], 82 P4[28]/RX_MCLK/MAT2[0]/TXD3, 83 Vss, 84 VDD(REG)(3V3), 85 P4[29]/TX_MCLK/MAT2[1]/RXD3, 86 P1[17]/ENET_MDIO, 87 P1[16]/ENET_MDC, 88 P1[15]/ENET_REF_CLK, 89 P1[14]/ENET_RX_ER, 90 P1[10]/ENET_RXD1, 91 P1[9]/ENET_RXD0, 92 P1[8]/ENET_CRS, 93 P1[4]/ENET_TX_EN, 94 P1[1]/ENET_TXD1, 95 P1[0]/ENET_TXD0, 96 VDD(3V3), 97 Vss, 98 P0[2]/TXD0/AD0[7], 99 P0[3]/RXD0/AD0[6], 100 RTCK

## LS1241
designator U?
pins: 1 ACR1, 2 VEE, 3 CIN (in), 4 RIN (in), 5 SIG (out), 7 VCC, 8 ACR2

## LSC4390
designator ?
pins: 1 VSS, 2 VCO, 3 RP, 4 VDDA, 5 HBLK, 7 SDA, 8 SCL, 9 Bright, 10 B-CUT, 11 G-CUT, 12 R-CUT, 13 R-Gian, 14 G-Gain, 15 B-Gain, 16 CONT, 17 VDD, 18 VFLB, 20 SW-OSD, 21 B, 22 G, 23 R, 24 VSS

## LSC4532
designator ?
pins: 1 VSSA, 2 VCO, 3 RP, 4 VDDA, 5 HFLB, 6 SS, 7 SDA, 8 SCL, 9 VDD, 10 VFLB, 11 HTON, 12 FBGK, 13 B, 14 G, 15 R, 16 VSS

## M52742ASP
designator ?
pins: 1 BLK, 2 B, 3 12V, 4 B-OSD, 5 GND, 6 G, 7 SONG, 8 12V, 9 G-OSD, 10 GND, 11 R, 12 12V, 13 R-OSD, 14 GND, 15 ABL, 16 UNIFO, 17 5V, 18 SYNC, 19 LAMP, 20 SCL, 21 SDA, 22 GND, 23 R, 24 G, 25 B, 26 BRT, 27 MUTE, 28 GND, 29 -OUTR, 30 IGHT, 31 GND, 32 -OUTG, 33 GND, 34 GND, 35 -OUTB, 36 12V

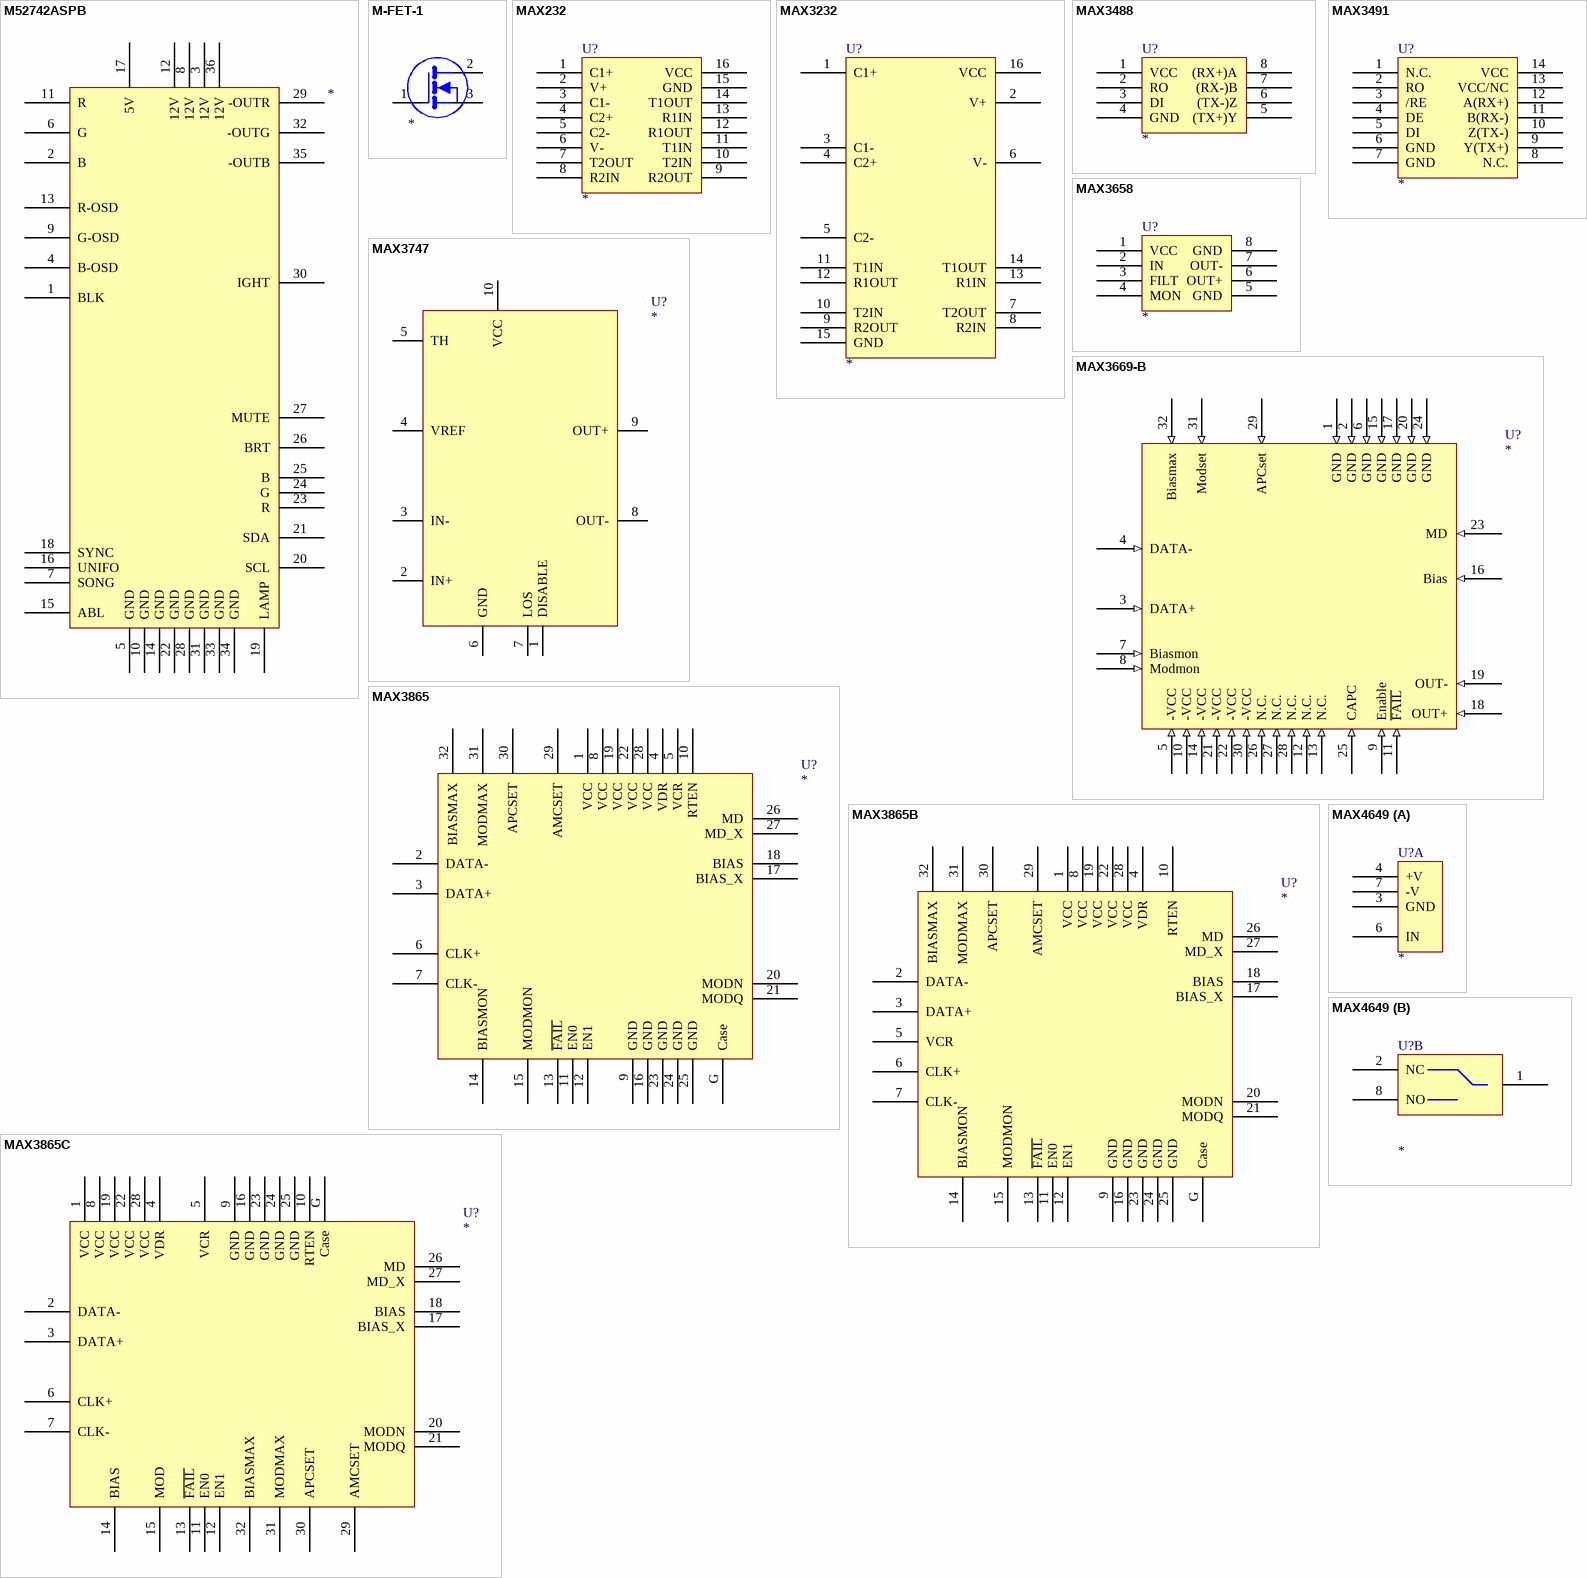
[diagram p38: symbols M52742ASPB to MAX4649]

## M52742ASPB
designator ?
pins: 1 BLK, 2 B, 3 12V, 4 B-OSD, 5 GND, 6 G, 7 SONG, 8 12V, 9 G-OSD, 10 GND, 11 R, 12 12V, 13 R-OSD, 14 GND, 15 ABL, 16 UNIFO, 17 5V, 18 SYNC, 19 LAMP, 20 SCL, 21 SDA, 22 GND, 23 R, 24 G, 25 B, 26 BRT, 27 MUTE, 28 GND, 29 -OUTR, 30 IGHT, 31 GND, 32 -OUTG, 33 GND, 34 GND, 35 -OUTB, 36 12V

## M-FET-1
designator ?
pins: 1, 2, 3

## MAX232
designator U?
footprint SOL-16
pins: 1 C1+, 2 V+, 3 C1-, 4 C2+, 5 C2-, 6 V-, 7 T2OUT, 8 R2IN, 9 R2OUT, 10 T2IN, 11 T1IN, 12 R1OUT, 13 R1IN, 14 T1OUT, 15 GND, 16 VCC

## MAX3232
designator U?
footprint SOP16
pins: 1 C1+, 2 V+, 3 C1-, 4 C2+, 5 C2-, 6 V-, 7 T2OUT, 8 R2IN, 9 R2OUT, 10 T2IN, 11 T1IN, 12 R1OUT, 13 R1IN, 14 T1OUT, 15 GND, 16 VCC

## MAX3488
designator U?
footprint SO-8
pins: 1 VCC, 2 RO, 3 DI, 4 GND, 5 (TX+)Y, 6 (TX-)Z, 7 (RX-)B, 8 (RX+)A

## MAX3491
designator U?
footprint SO-14
pins: 1 N.C., 2 RO, 3 /RE, 4 DE, 5 DI, 6 GND, 7 GND, 8 N.C., 9 Y(TX+), 10 Z(TX-), 11 B(RX-), 12 A(RX+), 13 VCC/NC, 14 VCC

## MAX3658
designator U?
footprint T833
pins: 1 VCC, 2 IN, 3 FILT, 4 MON, 5 GND, 6 OUT+, 7 OUT-, 8 GND

## MAX3669-B
designator U?
footprint MAX3669
pins: 1 GND (in), 2 GND (in), 3 DATA+ (in), 4 DATA- (in), 5 -VCC (in), 6 GND (in), 7 Biasmon (in), 8 Modmon (in), 9 Enable (in), 10 -VCC (in), 11 ~{FAIL} (in), 12 N.C. (in), 13 N.C. (in), 14 -VCC (in), 15 GND (in), 16 Bias (in), 17 GND (in), 18 OUT+ (in), 19 OUT- (in), 20 GND (in), 21 -VCC (in), 22 -VCC (in), 23 MD (in), 24 GND (in), 25 CAPC (in), 26 N.C. (in), 27 N.C. (in), 28 N.C. (in), 29 APCset (in), 30 -VCC (in), 31 Modset (in), 32 Biasmax (in)

## MAX3747
designator U?
footprint 10UMAX
pins: 1 DISABLE, 2 IN+, 3 IN-, 4 VREF, 5 TH, 6 GND, 7 LOS, 8 OUT-, 9 OUT+, 10 VCC

## MAX3865
designator U?
footprint ADN8830 - A
pins: 1 VCC, 2 DATA-, 3 DATA+, 4 VDR, 5 VCR, 6 CLK+, 7 CLK-, 8 VCC, 9 GND, 10 RTEN, 11 EN0, 12 EN1, 13 ~{FAIL}, 14 BIASMON, 15 MODMON, 16 GND, 17 BIAS_X, 18 BIAS, 19 VCC, 20 MODN, 21 MODQ, 22 VCC, 23 GND, 24 GND, 25 GND, 26 MD, 27 MD_X, 28 VCC, 29 AMCSET, 30 APCSET, 31 MODMAX, 32 BIASMAX, G Case

## MAX3865B
designator U?
footprint ADN8830 - A
pins: 1 VCC, 2 DATA-, 3 DATA+, 4 VDR, 5 VCR, 6 CLK+, 7 CLK-, 8 VCC, 9 GND, 10 RTEN, 11 EN0, 12 EN1, 13 ~{FAIL}, 14 BIASMON, 15 MODMON, 16 GND, 17 BIAS_X, 18 BIAS, 19 VCC, 20 MODN, 21 MODQ, 22 VCC, 23 GND, 24 GND, 25 GND, 26 MD, 27 MD_X, 28 VCC, 29 AMCSET, 30 APCSET, 31 MODMAX, 32 BIASMAX, G Case

## MAX3865C
designator U?
footprint ADN8830 - A
pins: 1 VCC, 2 DATA-, 3 DATA+, 4 VDR, 5 VCR, 6 CLK+, 7 CLK-, 8 VCC, 9 GND, 10 RTEN, 11 EN0, 12 EN1, 13 ~{FAIL}, 14 BIAS, 15 MOD, 16 GND, 17 BIAS_X, 18 BIAS, 19 VCC, 20 MODN, 21 MODQ, 22 VCC, 23 GND, 24 GND, 25 GND, 26 MD, 27 MD_X, 28 VCC, 29 AMCSET, 30 APCSET, 31 MODMAX, 32 BIASMAX, G Case

## MAX4649
designator U?
part A pins: 3 GND, 4 +V, 6 IN, 7 -V
part B pins: 1 COM, 2 NC, 8 NO

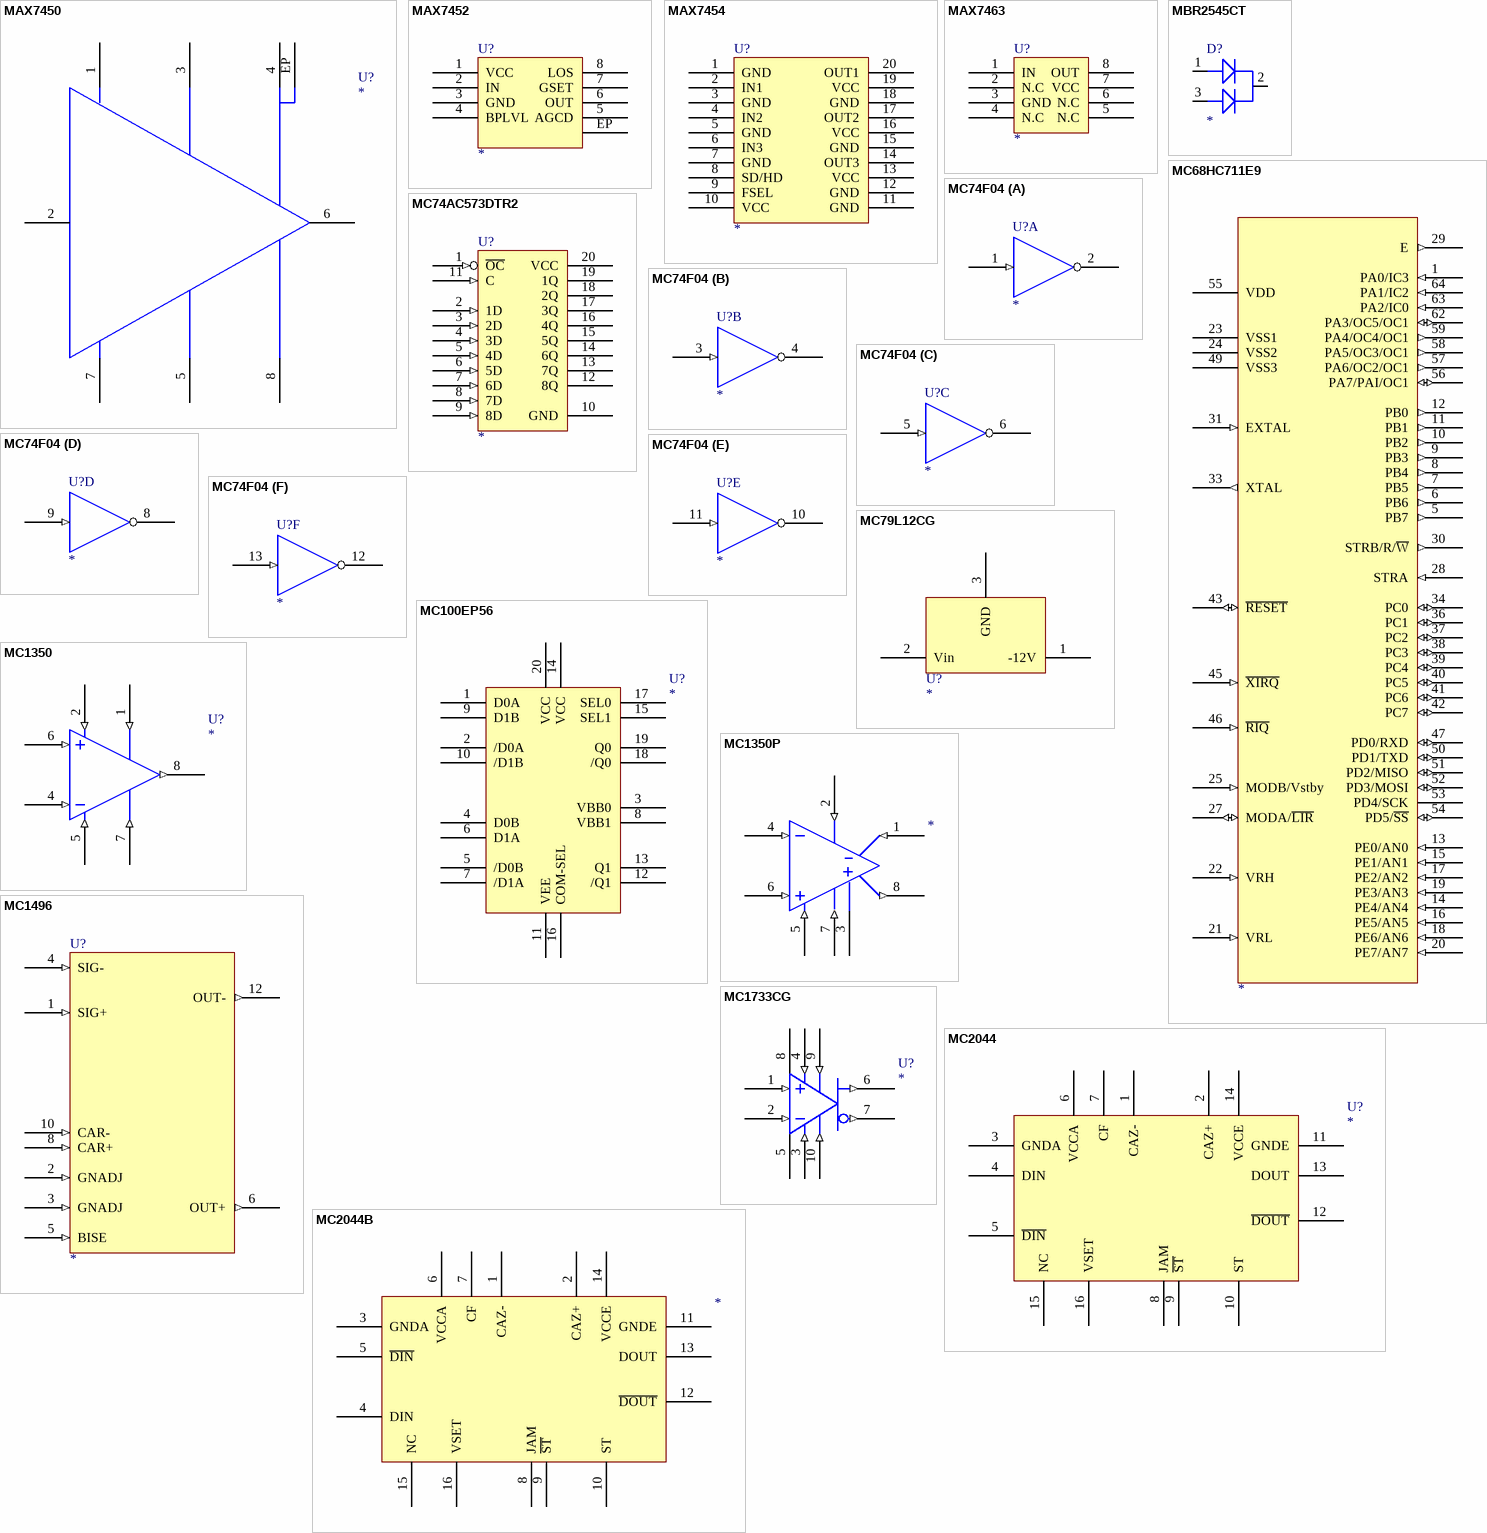
[diagram p39: symbols MAX7450 to MC2044B]

## MAX7450
designator U?
footprint SO-8-EP
pins: 1, 2, 3, 4, 5, 6, 7, 8, EP

## MAX7452
designator U?
footprint SO-8-EP
pins: 1 VCC, 2 IN, 3 GND, 4 BPLVL, 5 AGCD, 6 OUT, 7 GSET, 8 LOS, EP

## MAX7454
designator U?
footprint TSSOP20
pins: 1 GND, 2 IN1, 3 GND, 4 IN2, 5 GND, 6 IN3, 7 GND, 8 SD/HD, 9 FSEL, 10 VCC, 11 GND, 12 GND, 13 VCC, 14 OUT3, 15 GND, 16 VCC, 17 OUT2, 18 GND, 19 VCC, 20 OUT1

## MAX7463
designator U?
footprint SO-8
pins: 1 IN, 2 N.C, 3 GND, 4 N.C, 5 N.C, 6 N.C, 7 VCC, 8 OUT

## MBR2545CT
designator D?
pins: 1 A1, 2 C, 3 A2

## MC68HC711E9
designator ?
pins: 1 PA0/IC3 (in), 5 PB7 (out), 6 PB6 (out), 7 PB5 (out), 8 PB4 (out), 9 PB3 (out), 10 PB2 (out), 11 PB1 (out), 12 PB0 (out), 13 PE0/AN0 (in), 14 PE4/AN4 (in), 15 PE1/AN1 (in), 16 PE5/AN5 (in), 17 PE2/AN2 (in), 18 PE6/AN6 (in), 19 PE3/AN3 (in), 20 PE7/AN7 (in), 21 VRL (in), 22 VRH (in), 23 VSS1 (power), 24 VSS2 (power), 25 MODB/Vstby (in), 27 MODA/~{LIR} (io), 28 STRA (in), 29 E (out), 30 STRB/R/~{W} (out), 31 EXTAL (in), 33 XTAL (out), 34 PC0 (io), 36 PC1 (io), 37 PC2 (io), 38 PC3 (io), 39 PC4 (io), 40 PC5 (io), 41 PC6 (io), 42 PC7 (io), 43 ~{RESET} (io), 45 ~{XIRQ} (in), 46 ~{RIQ} (in), 47 PD0/RXD (io), 49 VSS3 (power), 50 PD1/TXD (io), 51 PD2/MISO (io), 52 PD3/MOSI (io), 53 PD4/SCK, 54 PD5/~{SS} (io), 55 VDD (power), 56 PA7/PAI/OC1 (io), 57 PA6/OC2/OC1 (out), 58 PA5/OC3/OC1 (out), 59 PA4/OC4/OC1 (out), 62 PA3/OC5/OC1 (io), 63 PA2/IC0 (in), 64 PA1/IC2 (in)

## MC74AC573DTR2
designator U?
OCTAL D-TYPE TRANSPARENT LCH 3SO
footprint SO-20
footprint DIP-20
pins: 1 ~{OC} (in), 2 1D (in), 3 2D (in), 4 3D (in), 5 4D (in), 6 5D (in), 7 6D (in), 8 7D (in), 9 8D (in), 10 GND (power), 11 C (in), 12 8Q (hiz), 13 7Q (hiz), 14 6Q (hiz), 15 5Q (hiz), 16 4Q (hiz), 17 3Q (hiz), 18 2Q (hiz), 19 1Q (hiz), 20 VCC (power)
1 alternate drawing of the same symbol

## MC74F04
designator U?
Hex Inverters
footprint SOIC14
footprint DIP14
part A pins: 1 (in), 2, 7 GND (power) hidden to GND, 14 VCC (power) hidden to VCC
part B pins: 3 (in), 4, 7 GND (power) hidden to GND, 14 VCC (power) hidden to VCC
part C pins: 5 (in), 6, 7 GND (power) hidden to GND, 14 VCC (power) hidden to VCC
part D pins: 7 GND (power) hidden to GND, 8, 9 (in), 14 VCC (power) hidden to VCC
part E pins: 7 GND (power) hidden to GND, 10, 11 (in), 14 VCC (power) hidden to VCC
part F pins: 7 GND (power) hidden to GND, 12, 13 (in), 14 VCC (power) hidden to VCC
2 alternate drawings of the same symbol

## MC79L12CG
designator U?
footprint TO39
pins: 1 -12V, 2 Vin, 3 GND

## MC100EP56
designator U?
footprint SO-20WB
pins: 1 D0A, 2 /D0A, 3 VBB0, 4 D0B, 5 /D0B, 6 D1A, 7 /D1A, 8 VBB1, 9 D1B, 10 /D1B, 11 VEE, 12 /Q1, 13 Q1, 14 VCC, 15 SEL1, 16 COM-SEL, 17 SEL0, 18 /Q0, 19 Q0, 20 VCC

## MC1350
designator U?
pins: 1 VCC (in), 2 PLUS V (in), 4 MINUS INPUT (in), 5 MINUS V (in), 6 PLUS INPUT (in), 7 BB (in), 8 OUTPUT (out)

## MC1350P
designator ?
pins: 1 OUT- (in), 2 VCC (in), 3 GND, 4 IN- (in), 5 AGC (in), 6 IN+ (in), 7 GND (in), 8 OUT+ (out)

## MC1496
designator U?
pins: 1 SIG+ (in), 2 GNADJ (in), 3 GNADJ (in), 4 SIG- (in), 5 BISE (in), 6 OUT+ (out), 8 CAR+ (in), 10 CAR- (in), 12 OUT- (out), 14 VEE (power) hidden to VEE

## MC1733CG
designator U?
pins: 1 INPUT1 (in), 2 INPUT2 (in), 3 GAIN1B (in), 4 GAIN1A (in), 5 VEE, 6 OUT1 (out), 7 OUT2 (out), 8 VCC, 9 GAIN2A (in), 10 GAIN2B (in)

## MC2044
designator U?
footprint SO-16
pins: 1 CAZ-, 2 CAZ+, 3 GNDA, 4 DIN, 5 ~{DIN}, 6 VCCA, 7 CF, 8 JAM, 9 ~{ST}, 10 ST, 11 GNDE, 12 ~{DOUT}, 13 DOUT, 14 VCCE, 15 NC, 16 VSET

## MC2044B
designator ?
pins: 1 CAZ-, 2 CAZ+, 3 GNDA, 4 DIN, 5 ~{DIN}, 6 VCCA, 7 CF, 8 JAM, 9 ~{ST}, 10 ST, 11 GNDE, 12 ~{DOUT}, 13 DOUT, 14 VCCE, 15 NC, 16 VSET

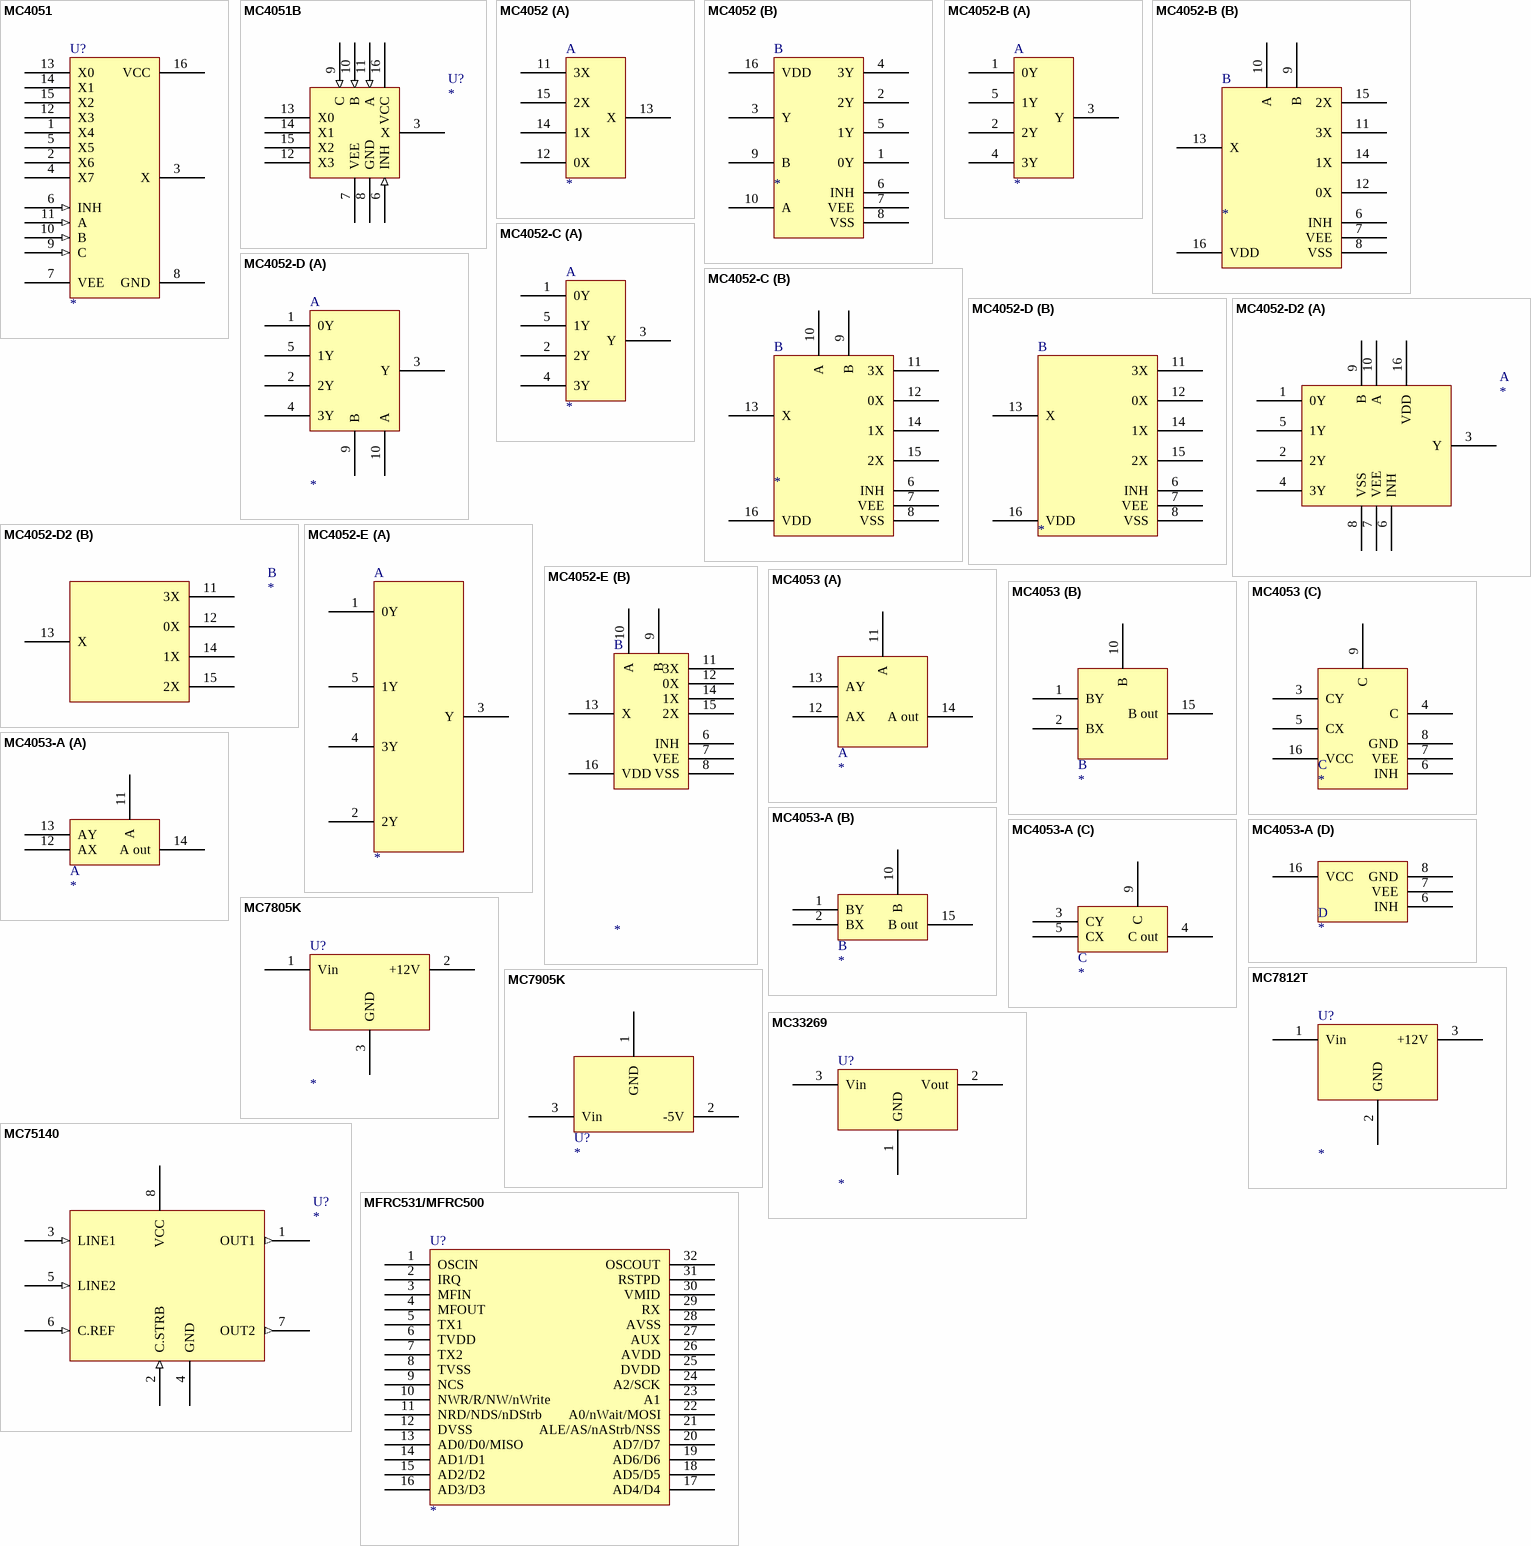
[diagram p40: symbols MC4051 to MFRC531/MFRC500]

## MC4051
designator U?
footprint DIP16
pins: 1 X4, 2 X6, 3 X, 4 X7, 5 X5, 6 INH (in), 7 VEE, 8 GND (power), 9 C (in), 10 B (in), 11 A (in), 12 X3, 13 X0, 14 X1, 15 X2, 16 VCC (power)

## MC4051B
designator U?
footprint DIP16
pins: 3 X, 6 INH (in), 7 VEE, 8 GND (power), 9 C (in), 10 B (in), 11 A (in), 12 X3, 13 X0, 14 X1, 15 X2, 16 VCC (power)

## MC4052
designator ?
part A pins: 11 3X, 12 0X, 13 X, 14 1X, 15 2X
part B pins: 1 0Y, 2 2Y, 3 Y, 4 3Y, 5 1Y, 6 INH, 7 VEE, 8 VSS, 9 B, 10 A, 16 VDD

## MC4052-B
designator ?
part A pins: 1 0Y, 2 2Y, 3 Y, 4 3Y, 5 1Y
part B pins: 6 INH, 7 VEE, 8 VSS, 9 B, 10 A, 11 3X, 12 0X, 13 X, 14 1X, 15 2X, 16 VDD

## MC4052-C
designator ?
part A pins: 1 0Y, 2 2Y, 3 Y, 4 3Y, 5 1Y
part B pins: 6 INH, 7 VEE, 8 VSS, 9 B, 10 A, 11 3X, 12 0X, 13 X, 14 1X, 15 2X, 16 VDD

## MC4052-D
designator ?
part A pins: 1 0Y, 2 2Y, 3 Y, 4 3Y, 5 1Y, 9 B, 10 A
part B pins: 6 INH, 7 VEE, 8 VSS, 11 3X, 12 0X, 13 X, 14 1X, 15 2X, 16 VDD

## MC4052-D2
designator ?
part A pins: 1 0Y, 2 2Y, 3 Y, 4 3Y, 5 1Y, 6 INH, 7 VEE, 8 VSS, 9 B, 10 A, 16 VDD
part B pins: 11 3X, 12 0X, 13 X, 14 1X, 15 2X

## MC4052-E
designator ?
part A pins: 1 0Y, 2 2Y, 3 Y, 4 3Y, 5 1Y
part B pins: 6 INH, 7 VEE, 8 VSS, 9 B, 10 A, 11 3X, 12 0X, 13 X, 14 1X, 15 2X, 16 VDD

## MC4053
designator ?
part A pins: 11 A, 12 AX, 13 AY, 14 A out
part B pins: 1 BY, 2 BX, 10 B, 15 B out
part C pins: 3 CY, 4 C, 5 CX, 6 INH, 7 VEE, 8 GND, 9 C, 16 VCC

## MC4053-A
designator ?
part A pins: 11 A, 12 AX, 13 AY, 14 A out
part B pins: 1 BY, 2 BX, 10 B, 15 B out
part C pins: 3 CY, 4 C out, 5 CX, 9 C
part D pins: 6 INH, 7 VEE, 8 GND, 16 VCC

## MC7805K
designator U?
footprint TO3
pins: 1 Vin, 2 +12V, 3 GND

## MC7812T
designator U?
footprint TO220
pins: 1 Vin, 2 GND, 3 +12V

## MC7905K
designator U?
footprint TO3
pins: 1 GND, 2 -5V, 3 Vin

## MC33269
designator U?
footprint TO-255AA
pins: 1 GND, 2 Vout, 3 Vin

## MC75140
designator U?
pins: 1 OUT1 (out), 2 C.STRB (in), 3 LINE1 (in), 4 GND, 5 LINE2 (in), 6 C.REF (in), 7 OUT2 (out), 8 VCC

## MFRC531/MFRC500
designator U?
footprint SO-32
pins: 1 OSCIN, 2 IRQ, 3 MFIN, 4 MFOUT, 5 TX1, 6 TVDD, 7 TX2, 8 TVSS, 9 NCS, 10 NWR/R/NW/nWrite, 11 NRD/NDS/nDStrb, 12 DVSS, 13 AD0/D0/MISO, 14 AD1/D1, 15 AD2/D2, 16 AD3/D3, 17 AD4/D4, 18 AD5/D5, 19 AD6/D6, 20 AD7/D7, 21 ALE/AS/nAStrb/NSS, 22 A0/nWait/MOSI, 23 A1, 24 A2/SCK, 25 DVDD, 26 AVDD, 27 AUX, 28 AVSS, 29 RX, 30 VMID, 31 RSTPD, 32 OSCOUT

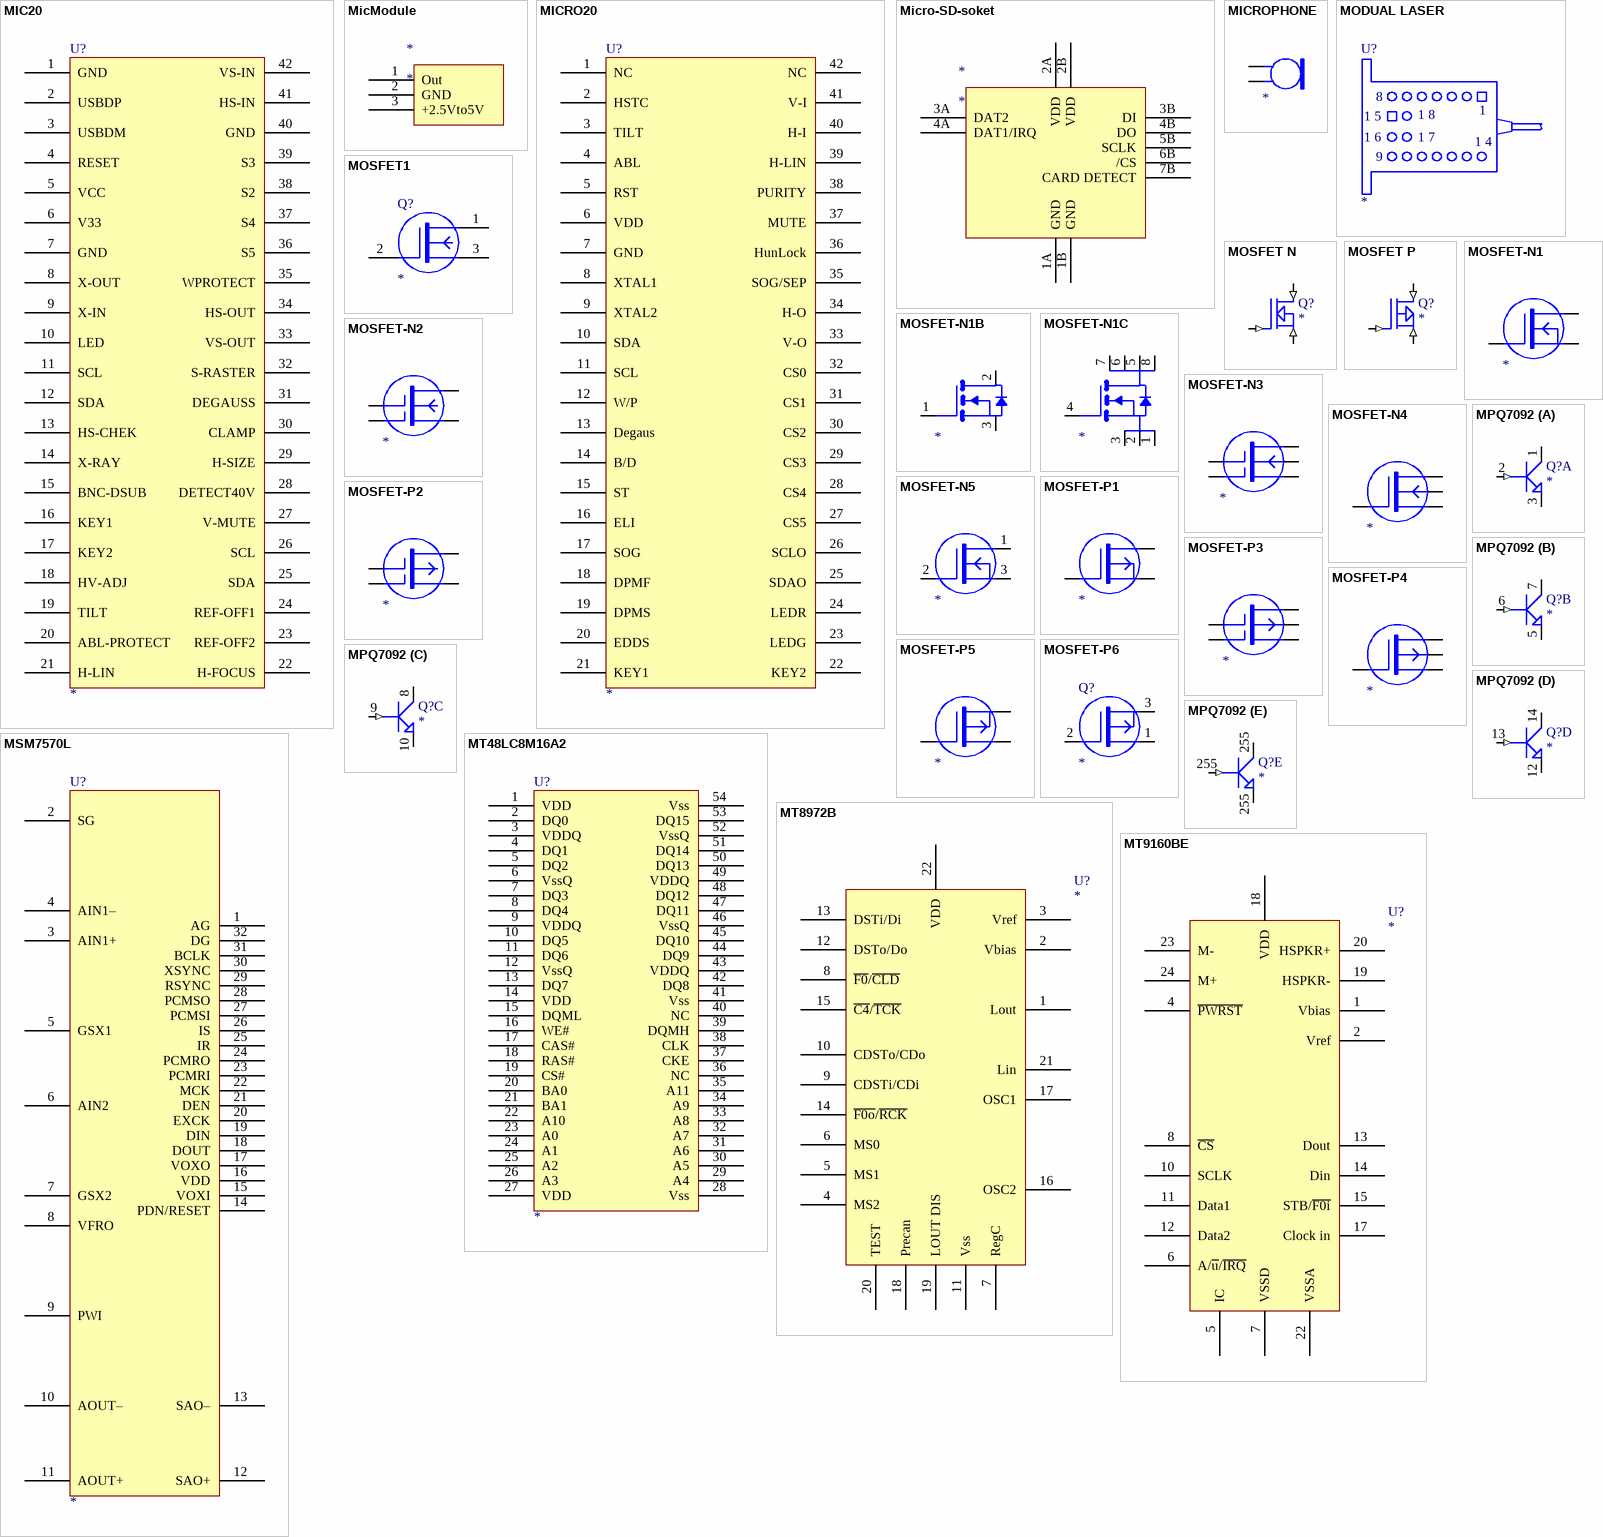
[diagram p41: symbols MIC20 to MT9160BE]

## MIC20
designator U?
footprint DIL42A
pins: 1 GND, 2 USBDP, 3 USBDM, 4 RESET, 5 VCC, 6 V33, 7 GND, 8 X-OUT, 9 X-IN, 10 LED, 11 SCL, 12 SDA, 13 HS-CHEK, 14 X-RAY, 15 BNC-DSUB, 16 KEY1, 17 KEY2, 18 HV-ADJ, 19 TILT, 20 ABL-PROTECT, 21 H-LIN, 22 H-FOCUS, 23 REF-OFF2, 24 REF-OFF1, 25 SDA, 26 SCL, 27 V-MUTE, 28 DETECT40V, 29 H-SIZE, 30 CLAMP, 31 DEGAUSS, 32 S-RASTER, 33 VS-OUT, 34 HS-OUT, 35 WPROTECT, 36 S5, 37 S4, 38 S2, 39 S3, 40 GND, 41 HS-IN, 42 VS-IN

## MicModule
designator *
pins: 1 Out, 2 GND, 3 +2.5Vto5V

## MICRO20
designator U?
footprint DIL42
pins: 1 NC, 2 HSTC, 3 TILT, 4 ABL, 5 RST, 6 VDD, 7 GND, 8 XTAL1, 9 XTAL2, 10 SDA, 11 SCL, 12 W/P, 13 Degaus, 14 B/D, 15 ST, 16 ELI, 17 SOG, 18 DPMF, 19 DPMS, 20 EDDS, 21 KEY1, 22 KEY2, 23 LEDG, 24 LEDR, 25 SDAO, 26 SCLO, 27 CS5, 28 CS4, 29 CS3, 30 CS2, 31 CS1, 32 CS0, 33 V-O, 34 H-O, 35 SOG/SEP, 36 HunLock, 37 MUTE, 38 PURITY, 39 H-LIN, 40 H-I, 41 V-I, 42 NC

## Micro-SD-soket
designator *
pins: 1A GND, 1B GND, 2A VDD, 2B VDD, 3A DAT2, 3B DI, 4A DAT1/IRQ, 4B DO, 5B SCLK, 6B /CS, 7B CARD DETECT

## MICROPHONE
designator ?
pins: 1, 2

## MODUAL LASER
designator U?
text: 8; 1; 1 5; 1 8; 1 6; 1 7; 1 4; 9

## MOSFET1
designator Q?
pins: 1 S, 2 G, 3 D

## MOSFET N
designator Q?
pins: DRAIN (in), GATE (in), SOURCE (in)

## MOSFET P
designator Q?
pins: DRAIN (in), GATE (in), SOURCE (in)

## MOSFET-N1
designator ?
pins: 1, 2, 3

## MOSFET-N1B
designator ?
pins: 1, 2, 3

## MOSFET-N1C
designator ?
pins: 1, 2, 3, 4, 5, 6, 7, 8

## MOSFET-N2
designator ?
pins: 1, 2, 3, 4

## MOSFET-N3
designator ?
pins: 1, 2, 3, 4, 5

## MOSFET-N4
designator ?
pins: 1, 2, 3, 4

## MOSFET-N5
designator ?
pins: 1, 2, 3

## MOSFET-P1
designator ?
pins: 1, 2, 3

## MOSFET-P2
designator ?
pins: 1, 2, 3, 4

## MOSFET-P3
designator ?
pins: 1, 2, 3, 4, 5

## MOSFET-P4
designator ?
pins: 1, 2, 3, 4

## MOSFET-P5
designator ?
pins: 1, 2, 3

## MOSFET-P6
designator Q?
pins: 1, 2, 3

## MPQ7092
designator Q?
part A pins: 1 C, 2 B (in), 3 E
part B pins: 5 E, 6 B (in), 7 C
part C pins: 8 C, 9 B (in), 10 E
part D pins: 12 E, 13 B (in), 14 C
part E pins: 255 C, 255 B (in), 255 E

## MSM7570L
designator U?
footprint TSOP32B
pins: 1 AG, 2 SG, 3 AIN1+, 4 AIN1–, 5 GSX1, 6 AIN2, 7 GSX2, 8 VFRO, 9 PWI, 10 AOUT–, 11 AOUT+, 12 SAO+, 13 SAO–, 14 PDN/RESET, 15 VOXI, 16 VDD, 17 VOXO, 18 DOUT, 19 DIN, 20 EXCK, 21 DEN, 22 MCK, 23 PCMRI, 24 PCMRO, 25 IR, 26 IS, 27 PCMSI, 28 PCMSO, 29 RSYNC, 30 XSYNC, 31 BCLK, 32 DG

## MT48LC8M16A2
designator U?
footprint TSOP54
pins: 1 VDD, 2 DQ0, 3 VDDQ, 4 DQ1, 5 DQ2, 6 VssQ, 7 DQ3, 8 DQ4, 9 VDDQ, 10 DQ5, 11 DQ6, 12 VssQ, 13 DQ7, 14 VDD, 15 DQML, 16 WE#, 17 CAS#, 18 RAS#, 19 CS#, 20 BA0, 21 BA1, 22 A10, 23 A0, 24 A1, 25 A2, 26 A3, 27 VDD, 28 Vss, 29 A4, 30 A5, 31 A6, 32 A7, 33 A8, 34 A9, 35 A11, 36 NC, 37 CKE, 38 CLK, 39 DQMH, 40 NC, 41 Vss, 42 DQ8, 43 VDDQ, 44 DQ9, 45 DQ10, 46 VssQ, 47 DQ11, 48 DQ12, 49 VDDQ, 50 DQ13, 51 DQ14, 52 VssQ, 53 DQ15, 54 Vss

## MT8972B
designator U?
footprint DIP22
pins: 1 Lout, 2 Vbias, 3 Vref, 4 MS2, 5 MS1, 6 MS0, 7 RegC, 8 ~{F0}/~{CLD}, 9 CDSTi/CDi, 10 CDSTo/CDo, 11 Vss (power), 12 DSTo/Do, 13 DSTi/Di, 14 ~{F0o}/~{RCK}, 15 ~{C4}/~{TCK}, 16 OSC2, 17 OSC1, 18 Precan, 19 LOUT DIS, 20 TEST, 21 Lin, 22 VDD (power)

## MT9160BE
designator U?
footprint DIP24
pins: 1 Vbias, 2 Vref, 4 ~{PWRST}, 5 IC (power), 6 A/~{u}/~{IRQ}, 7 VSSD (power), 8 ~{CS}, 10 SCLK, 11 Data1, 12 Data2, 13 Dout, 14 Din, 15 STB/~{F0i}, 17 Clock in, 18 VDD (power), 19 HSPKR-, 20 HSPKR+, 22 VSSA (power), 23 M-, 24 M+

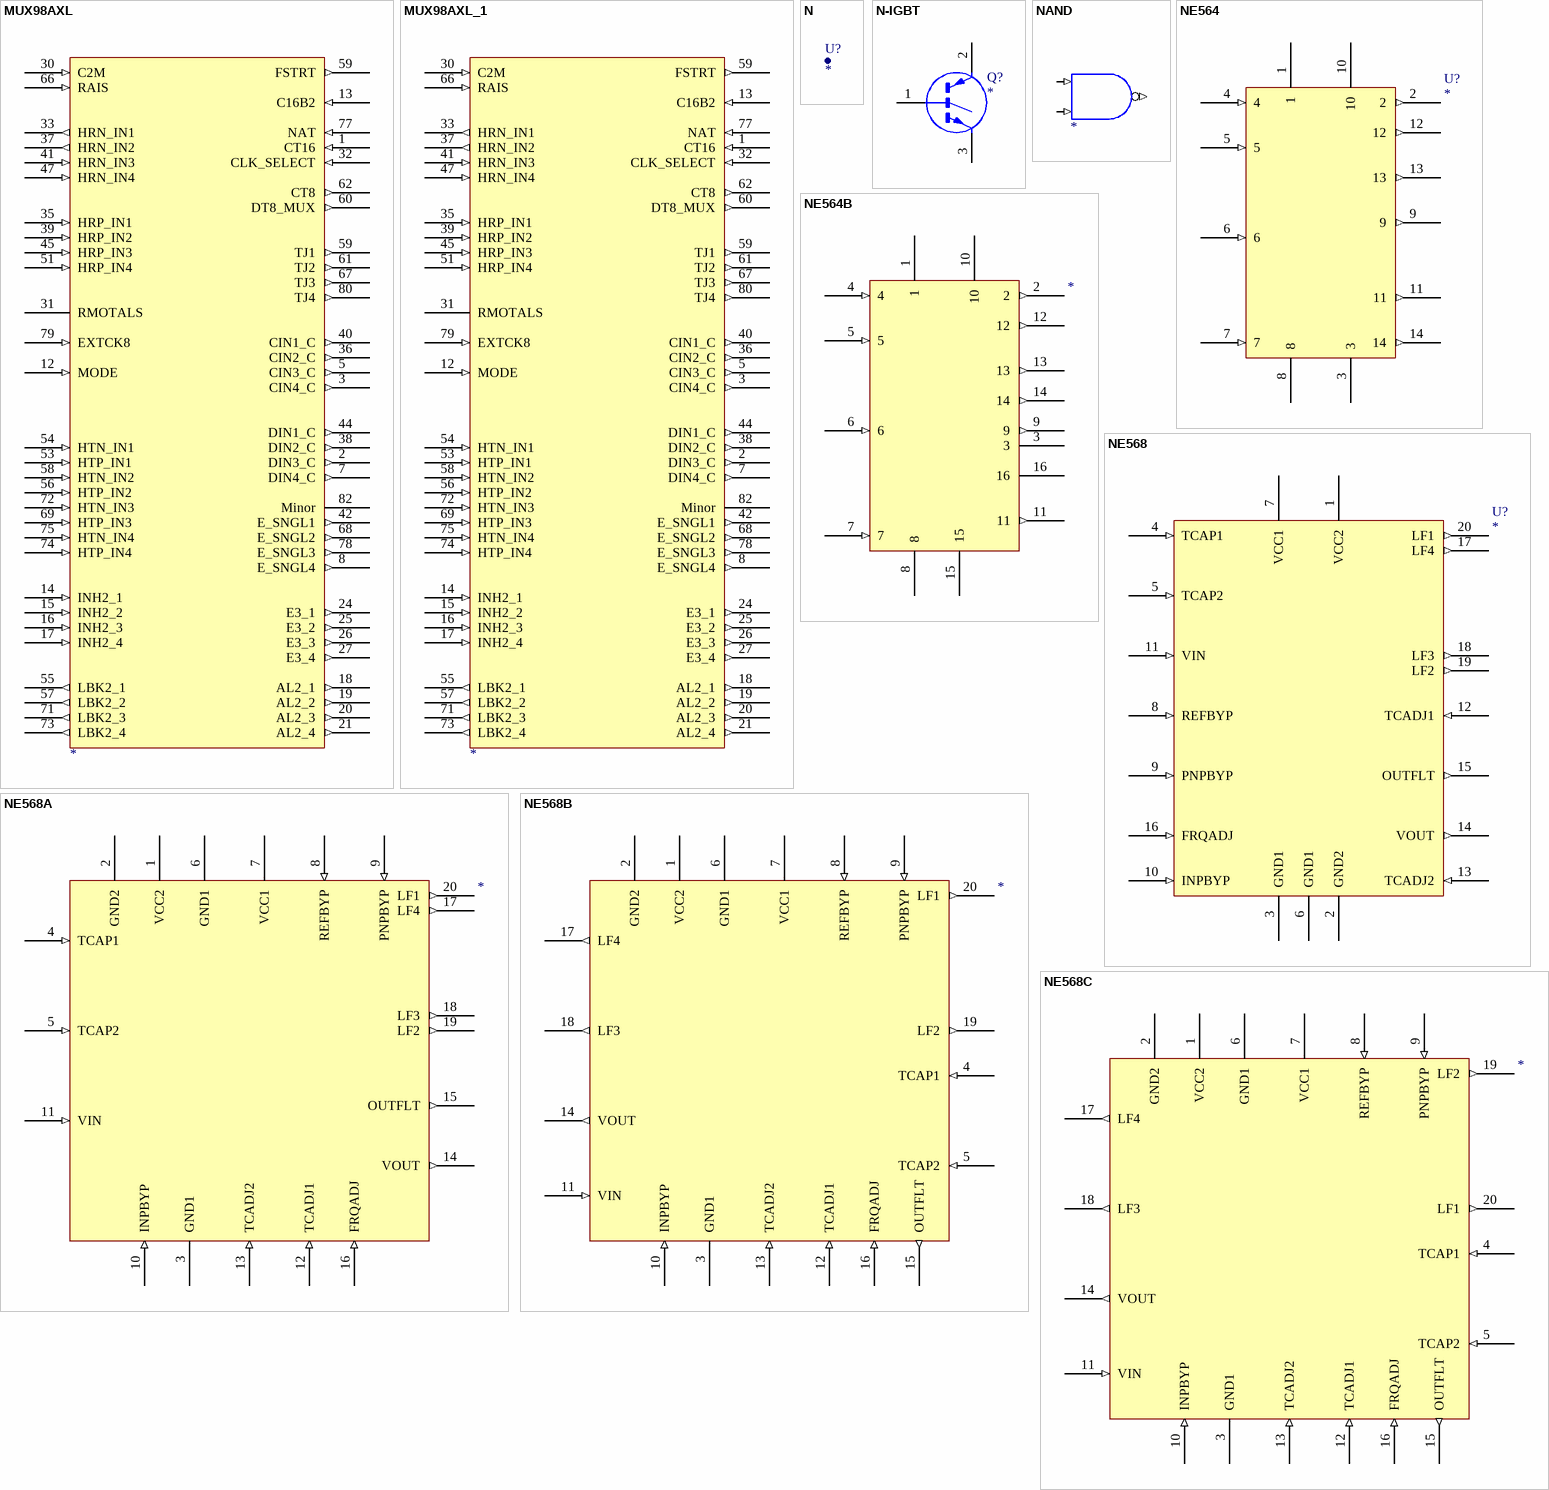
[diagram p42: symbols MUX98AXL to NE568C]

## MUX98AXL
designator ?
pins: 1 CT16 (in), 2 DIN3_C (out), 3 CIN4_C (out), 5 CIN3_C (out), 6 GND (power) hidden to GND, 7 DIN4_C (out), 8 E_SNGL4 (out), 12 MODE (in), 13 C16B2 (in), 14 INH2_1 (in), 15 INH2_2 (in), 16 INH2_3 (in), 17 INH2_4 (in), 18 AL2_1 (out), 19 AL2_2 (out), 20 AL2_3 (out), 21 AL2_4 (out), 24 E3_1 (out), 25 E3_2 (out), 26 E3_3 (out), 27 E3_4 (out), 28 GND (power) hidden to GND, 30 C2M (in), 31 RMOTALS, 32 CLK_SELECT (in), 33 HRN_IN1 (out), 35 HRP_IN1 (in), 36 CIN2_C (out), 37 HRN_IN2 (out), 38 DIN2_C (out), 39 HRP_IN2 (in), 40 CIN1_C (out), 41 HRN_IN3 (in), 42 E_SNGL1 (out), 44 DIN1_C (out), 45 HRP_IN3 (in), 47 HRN_IN4 (in), 49 GND (power) hidden to GND, 51 HRP_IN4 (in), 53 HTP_IN1 (in), 54 HTN_IN1 (in), 55 LBK2_1 (out), 56 HTP_IN2 (in), 57 LBK2_2 (out), 58 HTN_IN2 (in), 59 TJ1 (out), 59 FSTRT (out), 60 DT8_MUX (out), 61 TJ2 (out), 62 CT8 (out), 66 RAIS (in), 67 TJ3 (out), 68 E_SNGL2 (out), 69 HTP_IN3 (in), 70 GND (power) hidden to GND, 71 LBK2_3 (out), 72 HTN_IN3 (in), 73 LBK2_4 (out), 74 HTP_IN4 (in), 75 HTN_IN4 (in), 77 NAT (in), 78 E_SNGL3 (out), 79 EXTCK8 (in), 80 TJ4 (out), 82 Minor

## MUX98AXL_1
designator ?
pins: 1 CT16 (in), 2 DIN3_C (out), 3 CIN4_C (out), 5 CIN3_C (out), 6 GND (power) hidden to GND, 7 DIN4_C (out), 8 E_SNGL4 (out), 12 MODE (in), 13 C16B2 (in), 14 INH2_1 (in), 15 INH2_2 (in), 16 INH2_3 (in), 17 INH2_4 (in), 18 AL2_1 (out), 19 AL2_2 (out), 20 AL2_3 (out), 21 AL2_4 (out), 24 E3_1 (out), 25 E3_2 (out), 26 E3_3 (out), 27 E3_4 (out), 28 GND (power) hidden to GND, 30 C2M (in), 31 RMOTALS, 32 CLK_SELECT (in), 33 HRN_IN1 (out), 35 HRP_IN1 (in), 36 CIN2_C (out), 37 HRN_IN2 (out), 38 DIN2_C (out), 39 HRP_IN2 (in), 40 CIN1_C (out), 41 HRN_IN3 (in), 42 E_SNGL1 (out), 44 DIN1_C (out), 45 HRP_IN3 (in), 47 HRN_IN4 (in), 49 GND (power) hidden to GND, 51 HRP_IN4 (in), 53 HTP_IN1 (in), 54 HTN_IN1 (in), 55 LBK2_1 (out), 56 HTP_IN2 (in), 57 LBK2_2 (out), 58 HTN_IN2 (in), 59 TJ1 (out), 59 FSTRT (out), 60 DT8_MUX (out), 61 TJ2 (out), 62 CT8 (out), 66 RAIS (in), 67 TJ3 (out), 68 E_SNGL2 (out), 69 HTP_IN3 (in), 70 GND (power) hidden to GND, 71 LBK2_3 (out), 72 HTN_IN3 (in), 73 LBK2_4 (out), 74 HTP_IN4 (in), 75 HTN_IN4 (in), 77 NAT (in), 78 E_SNGL3 (out), 79 EXTCK8 (in), 80 TJ4 (out), 82 Minor

## N
designator U?

## N-IGBT
designator Q?
footprint SMD-23
footprint TO-92
footprint TO-18B
footprint SMD-24
pins: 1 B, 2 E, 3 E

## NAND
designator ?
pins: 1 (in), 2 (in), 3 (out)

## NE564
designator U?
pins: 1, 2 (out), 3, 4 (in), 5 (in), 6 (in), 7 (in), 8, 9 (out), 10, 11 (out), 12 (out), 13 (out), 14 (out)

## NE564B
designator ?
pins: 1, 2 (out), 3, 4 (in), 5 (in), 6 (in), 7 (in), 8, 9 (out), 10, 11 (out), 12 (out), 13 (out), 14 (out), 15, 16

## NE568
designator U?
pins: 1 VCC2, 2 GND2, 3 GND1, 4 TCAP1 (in), 5 TCAP2 (in), 6 GND1, 7 VCC1, 8 REFBYP (in), 9 PNPBYP (in), 10 INPBYP (in), 11 VIN (in), 12 TCADJ1 (in), 13 TCADJ2 (in), 14 VOUT (out), 15 OUTFLT (out), 16 FRQADJ (in), 17 LF4 (out), 18 LF3 (out), 19 LF2 (out), 20 LF1 (out)

## NE568A
designator ?
pins: 1 VCC2, 2 GND2, 3 GND1, 4 TCAP1 (in), 5 TCAP2 (in), 6 GND1, 7 VCC1, 8 REFBYP (in), 9 PNPBYP (in), 10 INPBYP (in), 11 VIN (in), 12 TCADJ1 (in), 13 TCADJ2 (in), 14 VOUT (out), 15 OUTFLT (out), 16 FRQADJ (in), 17 LF4 (out), 18 LF3 (out), 19 LF2 (out), 20 LF1 (out)

## NE568B
designator ?
pins: 1 VCC2, 2 GND2, 3 GND1, 4 TCAP1 (in), 5 TCAP2 (in), 6 GND1, 7 VCC1, 8 REFBYP (in), 9 PNPBYP (in), 10 INPBYP (in), 11 VIN (in), 12 TCADJ1 (in), 13 TCADJ2 (in), 14 VOUT (out), 15 OUTFLT (out), 16 FRQADJ (in), 17 LF4 (out), 18 LF3 (out), 19 LF2 (out), 20 LF1 (out)

## NE568C
designator ?
pins: 1 VCC2, 2 GND2, 3 GND1, 4 TCAP1 (in), 5 TCAP2 (in), 6 GND1, 7 VCC1, 8 REFBYP (in), 9 PNPBYP (in), 10 INPBYP (in), 11 VIN (in), 12 TCADJ1 (in), 13 TCADJ2 (in), 14 VOUT (out), 15 OUTFLT (out), 16 FRQADJ (in), 17 LF4 (out), 18 LF3 (out), 19 LF2 (out), 20 LF1 (out)

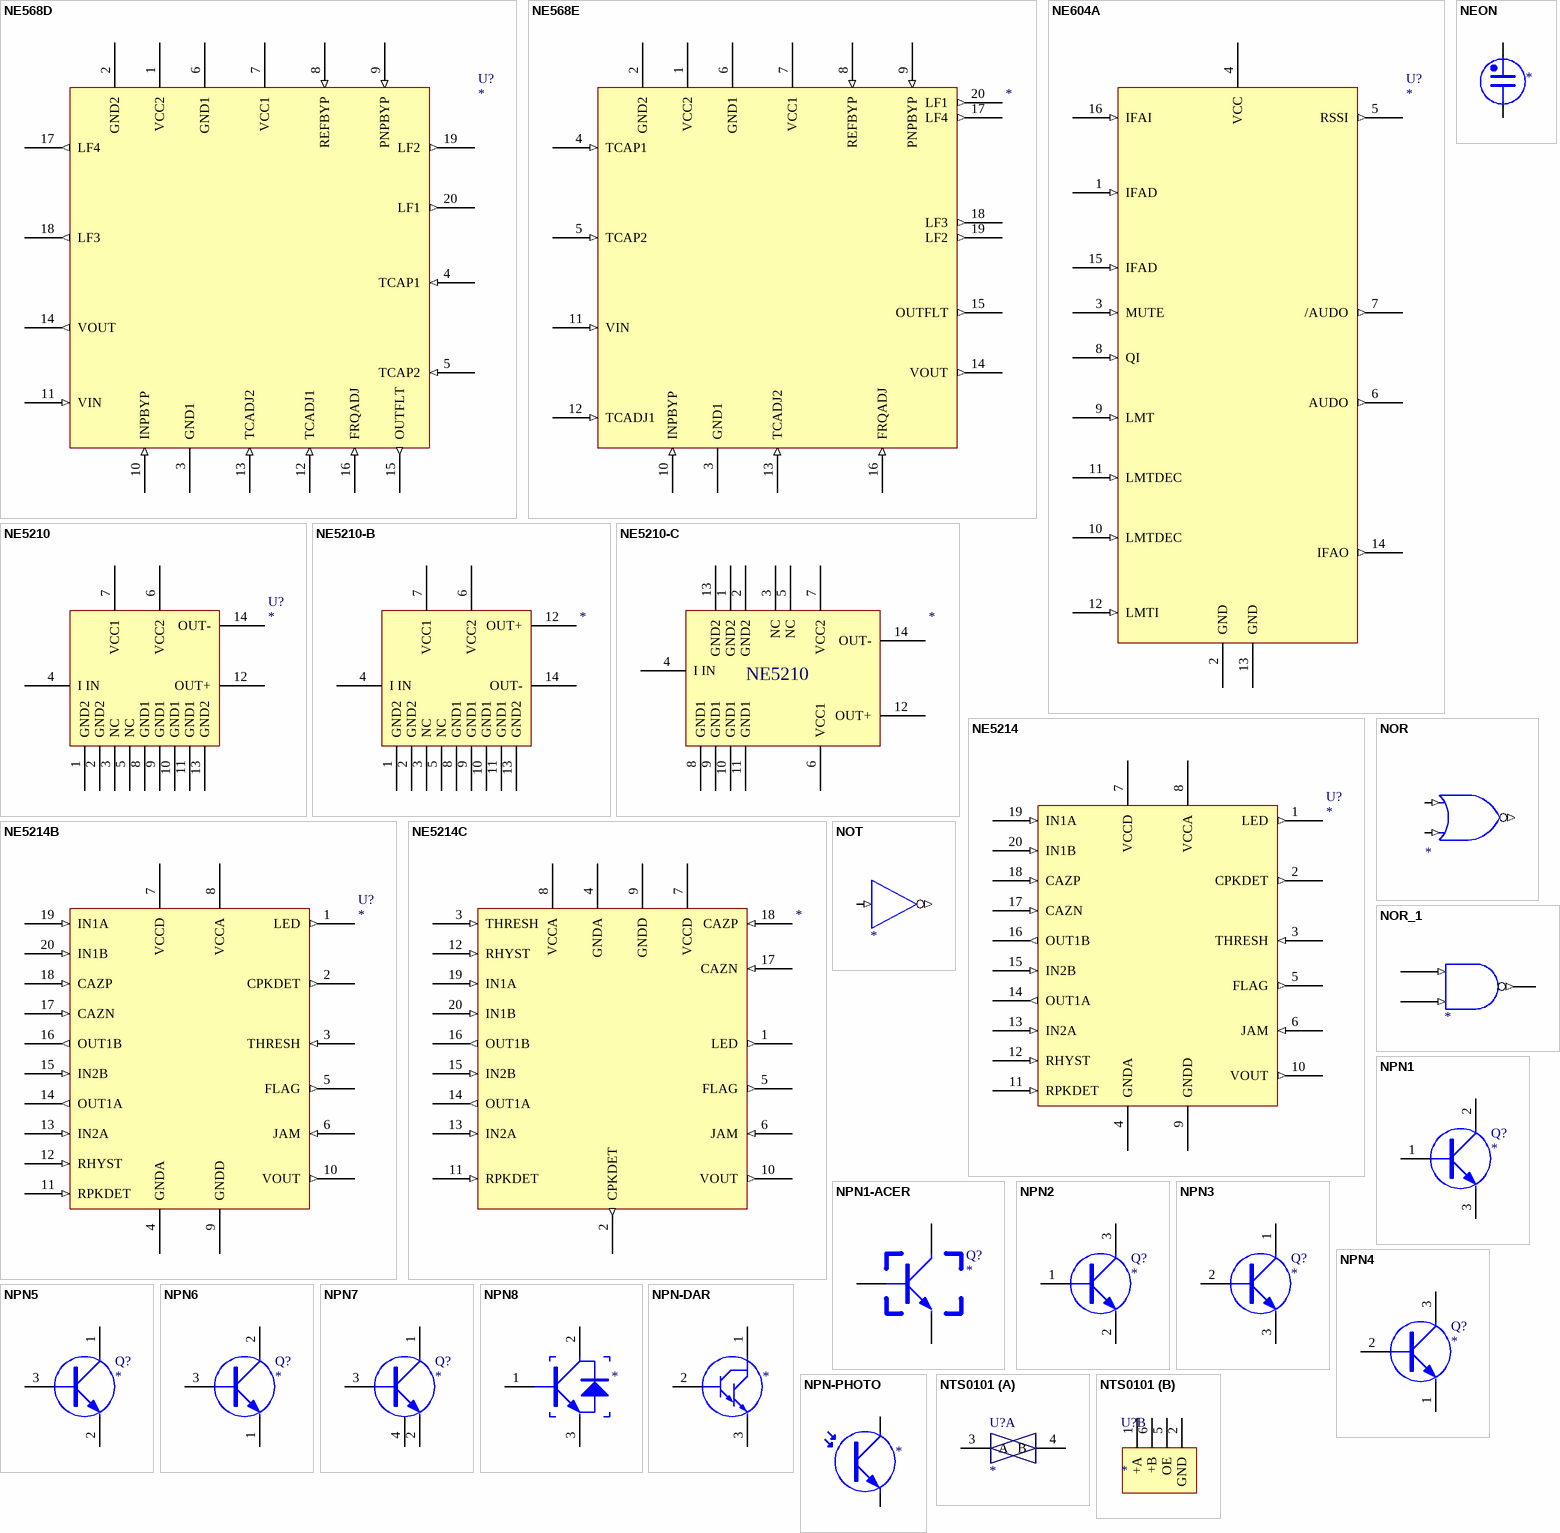
[diagram p43: symbols NE568D to NTS0101]

## NE568D
designator U?
footprint DIP20
pins: 1 VCC2, 2 GND2, 3 GND1, 4 TCAP1 (in), 5 TCAP2 (in), 6 GND1, 7 VCC1, 8 REFBYP (in), 9 PNPBYP (in), 10 INPBYP (in), 11 VIN (in), 12 TCADJ1 (in), 13 TCADJ2 (in), 14 VOUT (out), 15 OUTFLT (out), 16 FRQADJ (in), 17 LF4 (out), 18 LF3 (out), 19 LF2 (out), 20 LF1 (out)

## NE568E
designator ?
pins: 1 VCC2, 2 GND2, 3 GND1, 4 TCAP1 (in), 5 TCAP2 (in), 6 GND1, 7 VCC1, 8 REFBYP (in), 9 PNPBYP (in), 10 INPBYP (in), 11 VIN (in), 12 TCADJ1 (in), 13 TCADJ2 (in), 14 VOUT (out), 15 OUTFLT (out), 16 FRQADJ (in), 17 LF4 (out), 18 LF3 (out), 19 LF2 (out), 20 LF1 (out)

## NE604A
designator U?
pins: 1 IFAD (in), 2 GND, 3 MUTE (in), 4 VCC, 5 RSSI (out), 6 AUDO (out), 7 /AUDO (out), 8 QI (in), 9 LMT (in), 10 LMTDEC (in), 11 LMTDEC (in), 12 LMTI (in), 13 GND, 14 IFAO (out), 15 IFAD (in), 16 IFAI (in)

## NE5210
designator U?
pins: 1 GND2, 2 GND2, 3 NC, 4 I IN, 5 NC, 6 VCC2, 7 VCC1, 8 GND1, 9 GND1, 10 GND1, 11 GND1, 12 OUT+, 13 GND2, 14 OUT-

## NE5210-B
designator ?
pins: 1 GND2, 2 GND2, 3 NC, 4 I IN, 5 NC, 6 VCC2, 7 VCC1, 8 GND1, 9 GND1, 10 GND1, 11 GND1, 12 OUT+, 13 GND2, 14 OUT-

## NE5210-C
designator ?
pins: 1 GND2, 2 GND2, 3 NC, 4 I IN, 5 NC, 6 VCC1, 7 VCC2, 8 GND1, 9 GND1, 10 GND1, 11 GND1, 12 OUT+, 13 GND2, 14 OUT-
text: NE5210

## NE5214
designator U?
pins: 1 LED (out), 2 CPKDET (out), 3 THRESH (in), 4 GNDA, 5 FLAG (out), 6 JAM (in), 7 VCCD, 8 VCCA, 9 GNDD, 10 VOUT (out), 11 RPKDET (in), 12 RHYST (in), 13 IN2A (in), 14 OUT1A (out), 15 IN2B (in), 16 OUT1B (out), 17 CAZN (in), 18 CAZP (in), 19 IN1A (in), 20 IN1B (in)

## NE5214B
designator U?
pins: 1 LED (out), 2 CPKDET (out), 3 THRESH (in), 4 GNDA, 5 FLAG (out), 6 JAM (in), 7 VCCD, 8 VCCA, 9 GNDD, 10 VOUT (out), 11 RPKDET (in), 12 RHYST (in), 13 IN2A (in), 14 OUT1A (out), 15 IN2B (in), 16 OUT1B (out), 17 CAZN (in), 18 CAZP (in), 19 IN1A (in), 20 IN1B (in)

## NE5214C
designator ?
pins: 1 LED (out), 2 CPKDET (out), 3 THRESH (in), 4 GNDA, 5 FLAG (out), 6 JAM (in), 7 VCCD, 8 VCCA, 9 GNDD, 10 VOUT (out), 11 RPKDET (in), 12 RHYST (in), 13 IN2A (in), 14 OUT1A (out), 15 IN2B (in), 16 OUT1B (out), 17 CAZN (in), 18 CAZP (in), 19 IN1A (in), 20 IN1B (in)

## NEON
designator ?
pins: 1, 2

## NOR
designator ?
pins: 1 (in), 2 (in), 3 (out)

## NOR_1
designator ?
pins: ?1 I0 (in), ?2 I1 (in), ?3 O (out)

## NOT
designator ?
pins: 1 (in), 2 (out)

## NPN1
designator Q?
footprint SMD-23
footprint TO-92
footprint TO-220
pins: 1 B, 2 C, 3 E

## NPN1-ACER
designator Q?
pins: 1 B, 2 C, 3 E

## NPN2
designator Q?
footprint SMD-23
footprint TO-92
footprint TO-220
pins: 1 B, 2 E, 3 C

## NPN3
designator Q?
footprint SMD-23
footprint TO-92
footprint TO-220
pins: 1 C, 2 B, 3 E

## NPN4
designator Q?
footprint SMD-23
pins: 1 E, 2 B, 3 C

## NPN5
designator Q?
pins: 1 C, 2 E, 3 B

## NPN6
designator Q?
pins: 1 E, 2 C, 3 B

## NPN7
designator Q?
pins: 1 C, 2 E, 3 B, 4 E

## NPN8
designator ?
pins: 1 B, 2 C, 3 E

## NPN-DAR
designator ?
pins: 1 C, 2 B, 3 E

## NPN-PHOTO
designator ?
pins: C, E

## NTS0101
designator U?
footprint SOT363
part A pins: 3 A, 4 B
part B pins: 1 +A, 2 GND, 5 OE, 6 +B

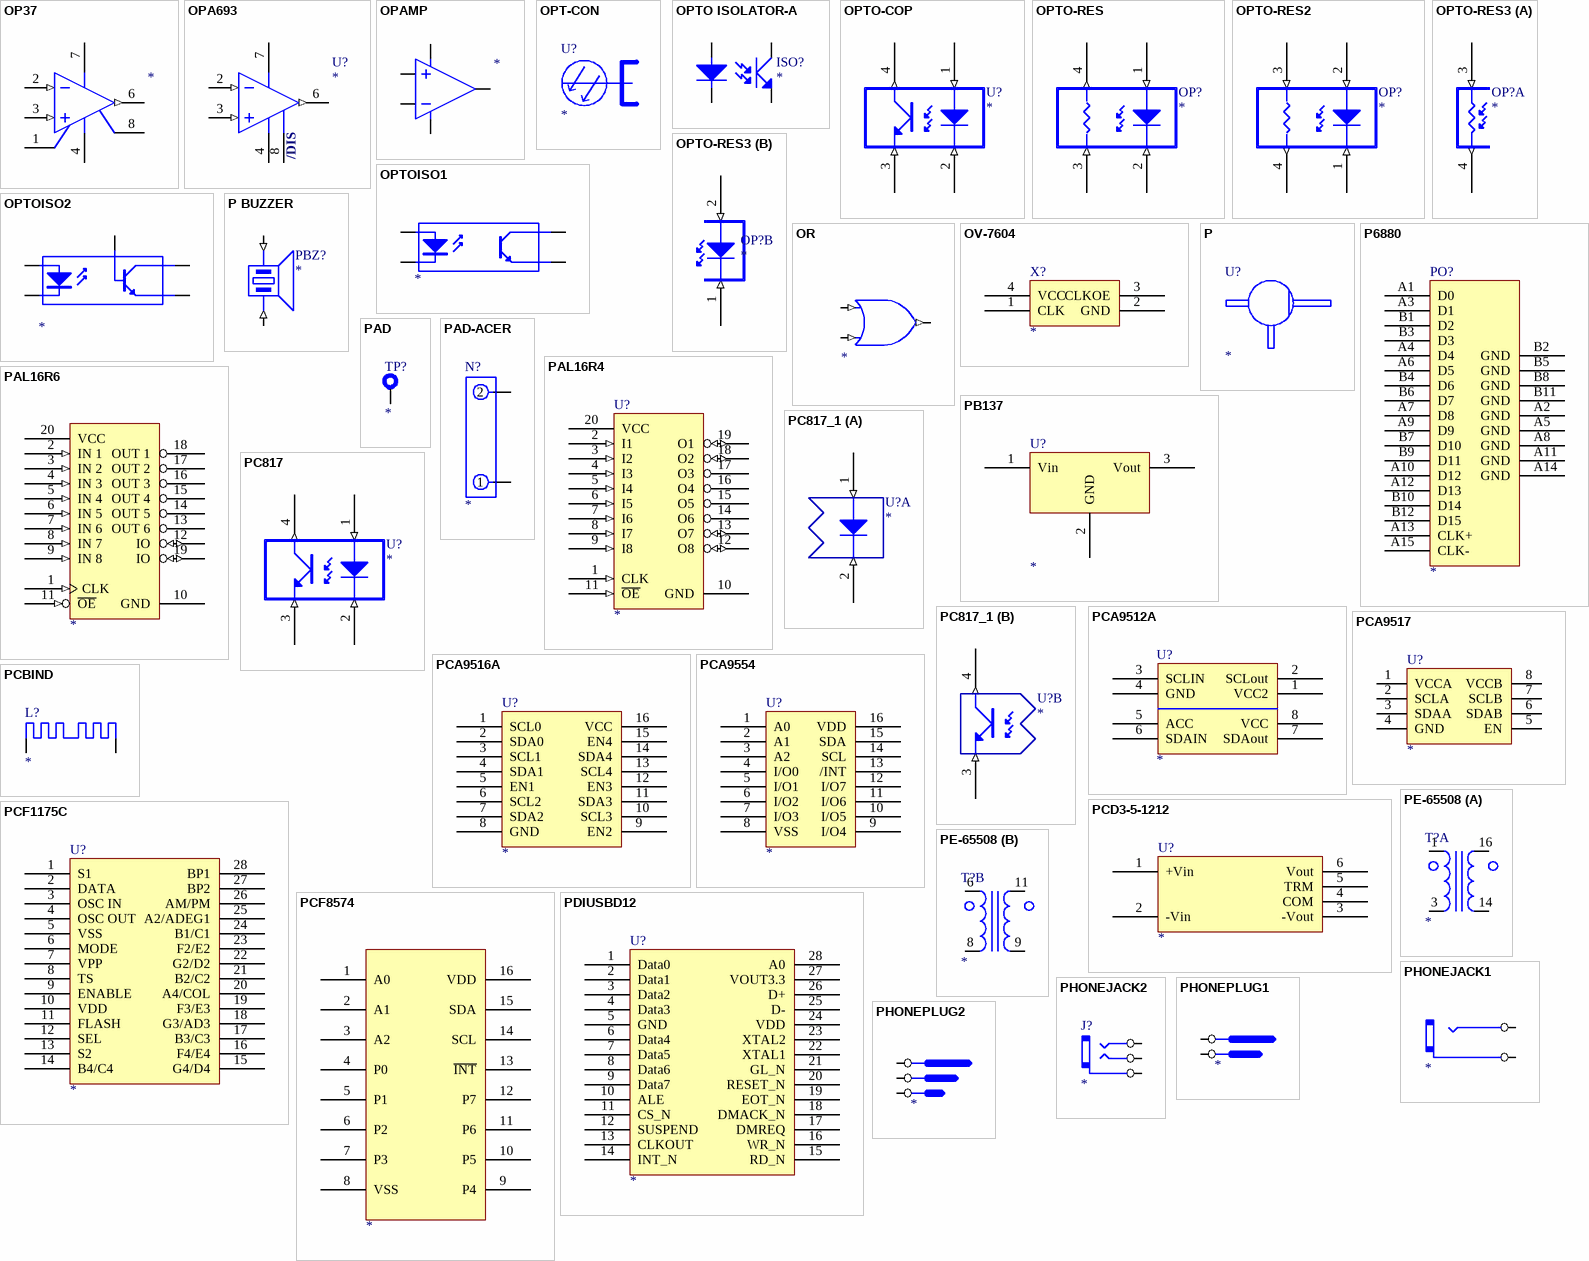
[diagram p44: symbols OP37 to PHONEPLUG2]

## OP37
designator ?
pins: 1 TRIM, 2 -IN (in), 3 +IN (in), 4 V- (power), 6 OUT (out), 7 V+ (power), 8 TRIM

## OPA693
designator U?
pins: 2 -IN (in), 3 +IN (in), 4 V- (power), 6 OUT (out), 7 V+ (power), 8 /DIS

## OPAMP
designator ?
pins: 1, 2, 3, 4, 5

## OPT-CON
designator U?

## OPTO ISOLATOR-A
designator ISO?
pins: ANODE, CATHODE, COLLECTOR, EMITTER

## OPTO-COP
designator U?
pins: 1 A (in), 2 C (in), 3 E (in), 4 CL (out)

## OPTO-RES
designator OP?
footprint OPR
pins: 1 A (in), 2 C (in), 3 E (in), 4 CL (out)

## OPTO-RES2
designator OP?
footprint OPR
pins: 1 A (in), 2 C (in), 3 E (in), 4 CL (out)

## OPTO-RES3
designator OP?
footprint OPR
part A pins: 3 E (in), 4 CL (out)
part B pins: 1 A (in), 2 C (in)

## OPTOISO1
designator ?
pins: A, C, E, K

## OPTOISO2
designator ?
pins: A, B, C, E, K

## OR
designator ?
pins: 1 (in), 2 (in), 3 (out)

## OV-7604
designator X?
footprint OV7604
pins: 1 CLK, 2 GND, 3 CLKOE, 4 VCC

## P
designator U?

## P6880
designator PO?
PROB FOR P6860 AND P6880 LOGIC ANALYZER
footprint P6860
pins: A1 D0, A2 GND, A3 D1, A4 D4, A5 GND, A6 D5, A7 D8, A8 GND, A9 D9, A10 D12, A11 GND, A12 D13, A13 CLK+, A14 GND, A15 CLK-, B1 D2, B2 GND, B3 D3, B4 D6, B5 GND, B6 D7, B7 D10, B8 GND, B9 D11, B10 D14, B11 GND, B12 D15

## P BUZZER
designator PBZ?
pins: 1 (in), 2 (in)

## PAD
designator TP?
footprint TP1
pins: 1

## PAD-ACER
designator N?
pins: 1, 2

## PAL16R4
designator U?
footprint DIP20
pins: 1 CLK (in), 2 I1 (in), 3 I2 (in), 4 I3 (in), 5 I4 (in), 6 I5 (in), 7 I6 (in), 8 I7 (in), 9 I8 (in), 10 GND (power), 11 ~{OE} (in), 12 O8 (io), 13 O7 (io), 14 O6 (hiz), 15 O5 (hiz), 16 O4 (hiz), 17 O3 (hiz), 18 O2 (io), 19 O1 (io), 20 VCC (power)

## PAL16R6
designator ?
pins: 1 CLK (in), 2 IN 1 (in), 3 IN 2 (in), 4 IN 3 (in), 5 IN 4 (in), 6 IN 5 (in), 7 IN 6 (in), 8 IN 7 (in), 9 IN 8 (in), 10 GND (power), 11 ~{OE} (in), 12 IO (io), 13 OUT 6 (hiz), 14 OUT 5 (hiz), 15 OUT 4 (hiz), 16 OUT 3 (hiz), 17 OUT 2 (hiz), 18 OUT 1 (hiz), 19 IO (io), 20 VCC (power)

## PB137
designator U?
footprint TO-220
pins: 1 Vin, 2 GND, 3 Vout

## PC817
designator U?
footprint DIP4
pins: 1 A (in), 2 C (in), 3 E (in), 4 CL (out)

## PC817_1
designator U?
footprint DIP4
part A pins: 1 A (in), 2 C (in)
part B pins: 3 E (in), 4 CL (out)

## PCA9512A
designator U?
footprint SO-8
pins: 1 VCC2, 2 SCLout, 3 SCLIN, 4 GND, 5 ACC, 6 SDAIN, 7 SDAout, 8 VCC

## PCA9516A
designator U?
footprint SO-16
pins: 1 SCL0, 2 SDA0, 3 SCL1, 4 SDA1, 5 EN1, 6 SCL2, 7 SDA2, 8 GND, 9 EN2, 10 SCL3, 11 SDA3, 12 EN3, 13 SCL4, 14 SDA4, 15 EN4, 16 VCC

## PCA9517
designator U?
footprint SO-8
pins: 1 VCCA, 2 SCLA, 3 SDAA, 4 GND, 5 EN, 6 SDAB, 7 SCLB, 8 VCCB

## PCA9554
designator U?
footprint TSSOP16
pins: 1 A0, 2 A1, 3 A2, 4 I/O0, 5 I/O1, 6 I/O2, 7 I/O3, 8 VSS, 9 I/O4, 10 I/O5, 11 I/O6, 12 I/O7, 13 /INT, 14 SCL, 15 SDA, 16 VDD

## PCBIND
designator L?
footprint PCBIND1
footprint PCBIND2
footprint PCBIND3
footprint PCBIND3
pins: 1 SDO, 2 SDO

## PCD3-5-1212
designator U?
footprint PCD3
pins: 1 +Vin, 2 -Vin, 3 -Vout, 4 COM, 5 TRM, 6 Vout

## PCF1175C
designator U?
footprint SOI-28
pins: 1 S1, 2 DATA, 3 OSC IN, 4 OSC OUT, 5 VSS, 6 MODE, 7 VPP, 8 TS, 9 ENABLE, 10 VDD, 11 FLASH, 12 SEL, 13 S2, 14 B4/C4, 15 G4/D4, 16 F4/E4, 17 B3/C3, 18 G3/AD3, 19 F3/E3, 20 A4/COL, 21 B2/C2, 22 G2/D2, 23 F2/E2, 24 B1/C1, 25 A2/ADEG1, 26 AM/PM, 27 BP2, 28 BP1

## PCF8574
designator ?
pins: 1 A0, 2 A1, 3 A2, 4 P0, 5 P1, 6 P2, 7 P3, 8 VSS, 9 P4, 10 P5, 11 P6, 12 P7, 13 ~{INT}, 14 SCL, 15 SDA, 16 VDD

## PDIUSBD12
designator U?
footprint TSSOP28
pins: 1 Data0, 2 Data1, 3 Data2, 4 Data3, 5 GND, 6 Data4, 7 Data5, 8 Data6, 9 Data7, 10 ALE, 11 CS_N, 12 SUSPEND, 13 CLKOUT, 14 INT_N, 15 RD_N, 16 WR_N, 17 DMREQ, 18 DMACK_N, 19 EOT_N, 20 RESET_N, 21 GL_N, 22 XTAL1, 23 XTAL2, 24 VDD, 25 D-, 26 D+, 27 VOUT3.3, 28 A0

## PE-65508
designator T?
footprint 16-PE-655XX
part A pins: 1, 3, 14, 16
part B pins: 6, 8, 9, 11

## PHONEJACK1
designator ?
pins: 1, 2

## PHONEJACK2
designator J?
footprint JAK-PHONE2
pins: 1, 2, 3

## PHONEPLUG1
designator ?
pins: 1, 2

## PHONEPLUG2
designator ?
pins: 1, 2, 3

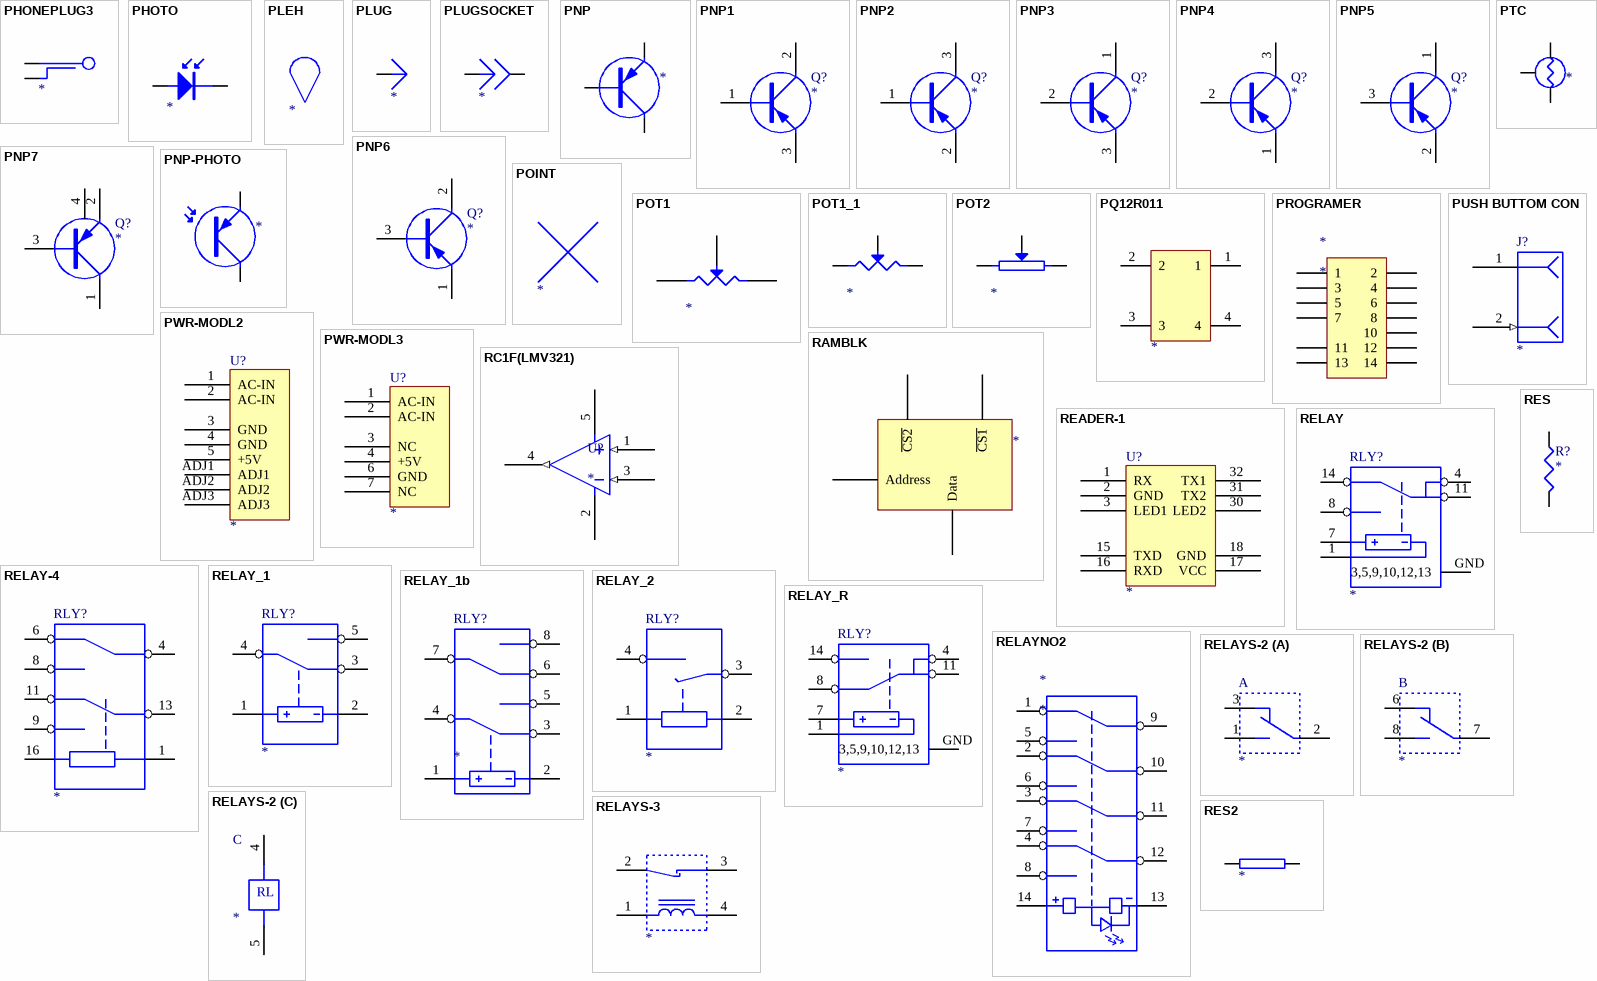
[diagram p45: symbols PHONEPLUG3 to RES2]

## PHONEPLUG3
designator ?
pins: 1, 2

## PHOTO
designator ?
pins: A, K

## PLEH
designator ?

## PLUG
designator ?
pins: 1

## PLUGSOCKET
designator ?
pins: 1, 2

## PNP
designator ?
pins: B, C, E

## PNP1
designator Q?
footprint SMD-23
footprint TO-92
footprint TO-18B
footprint SMD-24
pins: 1 B, 2 C, 3 E

## PNP2
designator Q?
footprint SMD-23
footprint TO-92
footprint TO-18B
footprint SMD-24
pins: 1 B, 2 E, 3 C

## PNP3
designator Q?
footprint SMD-23
footprint TO-92
footprint TO-18B
footprint SMD-24
pins: 1 C, 2 B, 3 E

## PNP4
designator Q?
footprint SMD-23
footprint TO-92
footprint TO-18B
footprint SMD-24
pins: 1 E, 2 B, 3 C

## PNP5
designator Q?
footprint SMD-23
footprint TO-92
footprint TO-18B
footprint SMD-24
pins: 1 C, 2 E, 3 B

## PNP6
designator Q?
footprint SMD-23
footprint TO-92
footprint TO-18B
footprint SMD-24
pins: 1 E, 2 E, 3 B

## PNP7
designator Q?
pins: 1 C, 2 E, 3 B, 4 E

## PNP-PHOTO
designator ?
pins: C, E

## POINT
designator ?

## POT1
designator ?
pins: 1, 2, 3

## POT1_1
designator ?
pins: 1, 2, 3

## POT2
designator ?
pins: 1, 2, W

## PQ12R011
designator ?
pins: 1, 2, 3, 4

## PROGRAMER
designator *
footprint HDR2X7B
pins: 1, 2, 3, 4, 5, 6, 7, 8, 10, 11, 12, 13, 14

## PTC
designator ?
pins: 1, 2, 3

## PUSH BUTTOM CON
designator J?
pins: 1, 2 (in)

## PWR-MODL2
designator U?
footprint PWR-MODL2
pins: 1 AC-IN, 2 AC-IN, 3 GND, 4 GND, 5 +5V, ADJ1, ADJ2, ADJ3

## PWR-MODL3
designator U?
footprint PWR-MODL2
pins: 1 AC-IN, 2 AC-IN, 3 NC, 4 +5V, 6 GND, 7 NC

## RAMBLK
designator ?
pins: ?1 ~{CS1}, ?2 ~{CS2}, ?3 Address, ?4 Data

## RC1F(LMV321)
designator U?
footprint G5 (Footprint not found)
pins: 1 (in), 2, 3 (in), 4 (out), 5

## READER-1
designator U?
footprint READER-1
pins: 1 RX, 2 GND, 3 LED1, 15 TXD, 16 RXD, 17 VCC, 18 GND, 30 LED2, 31 TX2, 32 TX1

## RELAY
designator RLY?
footprint RLYA
pins: 1, 4, 7, 8, 11, 14, GND 3,5,9,10,12,13

## RELAY-4
designator RLY?
footprint REL8B
pins: 1, 4, 6, 8, 9, 11, 13, 16

## RELAY_1
designator RLY?
footprint RLYA
pins: 1, 2, 3, 4, 5

## RELAY_1b
designator RLY?
footprint RLYA
pins: 1, 2, 3, 4, 5, 6, 7, 8

## RELAY_2
designator RLY?
footprint RLYA
pins: 1, 2, 3, 4

## RELAY_R
designator RLY?
footprint RLYA
pins: 1, 4, 7, 8, 11, 14, GND 3,5,9,10,12,13

## RELAYNO2
designator *
pins: 1, 2, 3, 4, 5, 6, 7, 8, 9, 10, 11, 12, 13, 14

## RELAYS-2
designator ?
Text Field1: REL8
part A pins: 1, 2, 3
part B pins: 6, 7, 8
part C pins: 4, 5
part C text: RL

## RELAYS-3
designator ?
pins: 1, 2, 3, 4

## RES
designator R?
footprint AXIAL0.4
footprint 1005
pins: 1, 2

## RES2
designator ?
pins: 1, 2

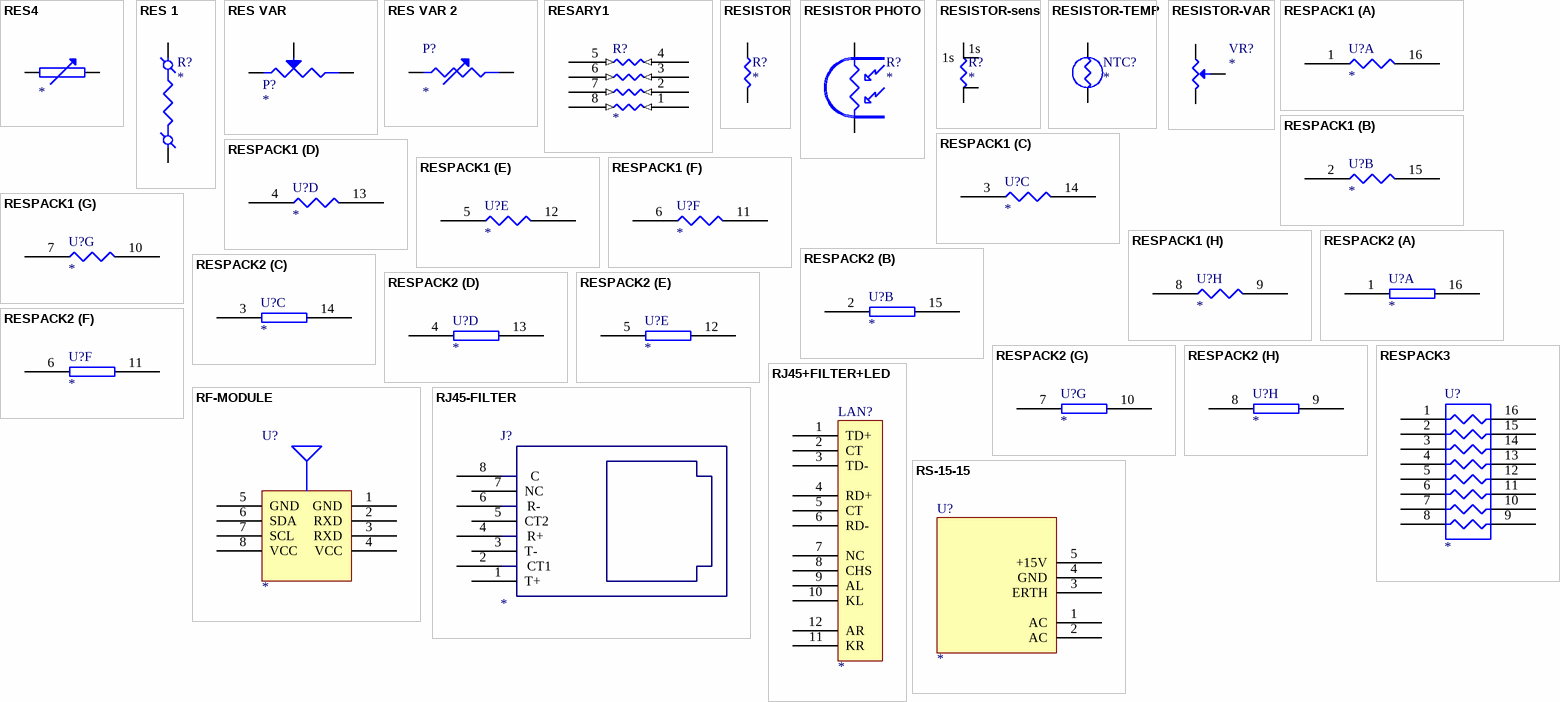
[diagram p46: symbols RES4 to RS-15-15]

## RES4
designator ?
pins: 1, 2

## RES 1
designator R?
pins: 1, 2

## RES VAR
designator P?
pins: 1, 2, 3

## RES VAR 2
designator P?
pins: 1, 2

## RESARY1
designator R?
footprint 1206ARRAY
pins: 1 R1 (in), 2 R2 (in), 3 R3 (in), 4 R4 (in), 5 R5 (in), 6 R6 (in), 7 R7 (in), 8 R8 (in)

## RESISTOR
designator R?
footprint 1005
footprint AXIAL0.4
footprint 0402
footprint 0704
pins: 1, 2

## RESISTOR PHOTO
designator R?
pins: 1, 2

## RESISTOR-sens
designator R?
footprint 1005
footprint AXIAL0.4
footprint 0402
footprint 0704
footprint 2512-b (SMD-2512 - 6.3mm*3mm)
pins: 1, 1s, 2, 2s

## RESISTOR-TEMP
designator NTC?
footprint RAD0.3
pins: 1, 2

## RESISTOR-VAR
designator VR?
footprint VRSMD2
footprint VR7
footprint VR5
footprint VR9
pins: 1, 2, 3

## RESPACK1
designator U?
footprint DIP16
part A pins: 1, 16
part B pins: 2, 15
part C pins: 3, 14
part D pins: 4, 13
part E pins: 5, 12
part F pins: 6, 11
part G pins: 7, 10
part H pins: 8, 9

## RESPACK2
designator U?
footprint DIP16
part A pins: 1, 16
part B pins: 2, 15
part C pins: 3, 14
part D pins: 4, 13
part E pins: 5, 12
part F pins: 6, 11
part G pins: 7, 10
part H pins: 8, 9

## RESPACK3
designator U?
footprint DIP16
pins: 1, 2, 3, 4, 5, 6, 7, 8, 9, 10, 11, 12, 13, 14, 15, 16

## RF-MODULE
designator U?
footprint RF-MODULE1
pins: 1 GND, 2 RXD, 3 RXD, 4 VCC, 5 GND, 6 SDA, 7 SCL, 8 VCC

## RJ45+FILTER+LED
designator LAN?
footprint RJ45+FILTER+LED
pins: 1 TD+, 2 CT, 3 TD-, 4 RD+, 5 CT, 6 RD-, 7 NC, 8 CHS, 9 AL, 10 KL, 11 KR, 12 AR

## RJ45-FILTER
designator J?
footprint RG45
pins: 1 T+, 2      CT1, 3 T-, 4      R+, 5 CT2, 6      R-, 7 NC, 8       C

## RS-15-15
designator U?
footprint PWR-MODL2
pins: 1 AC, 2 AC, 3 ERTH, 4 GND, 5 +15V

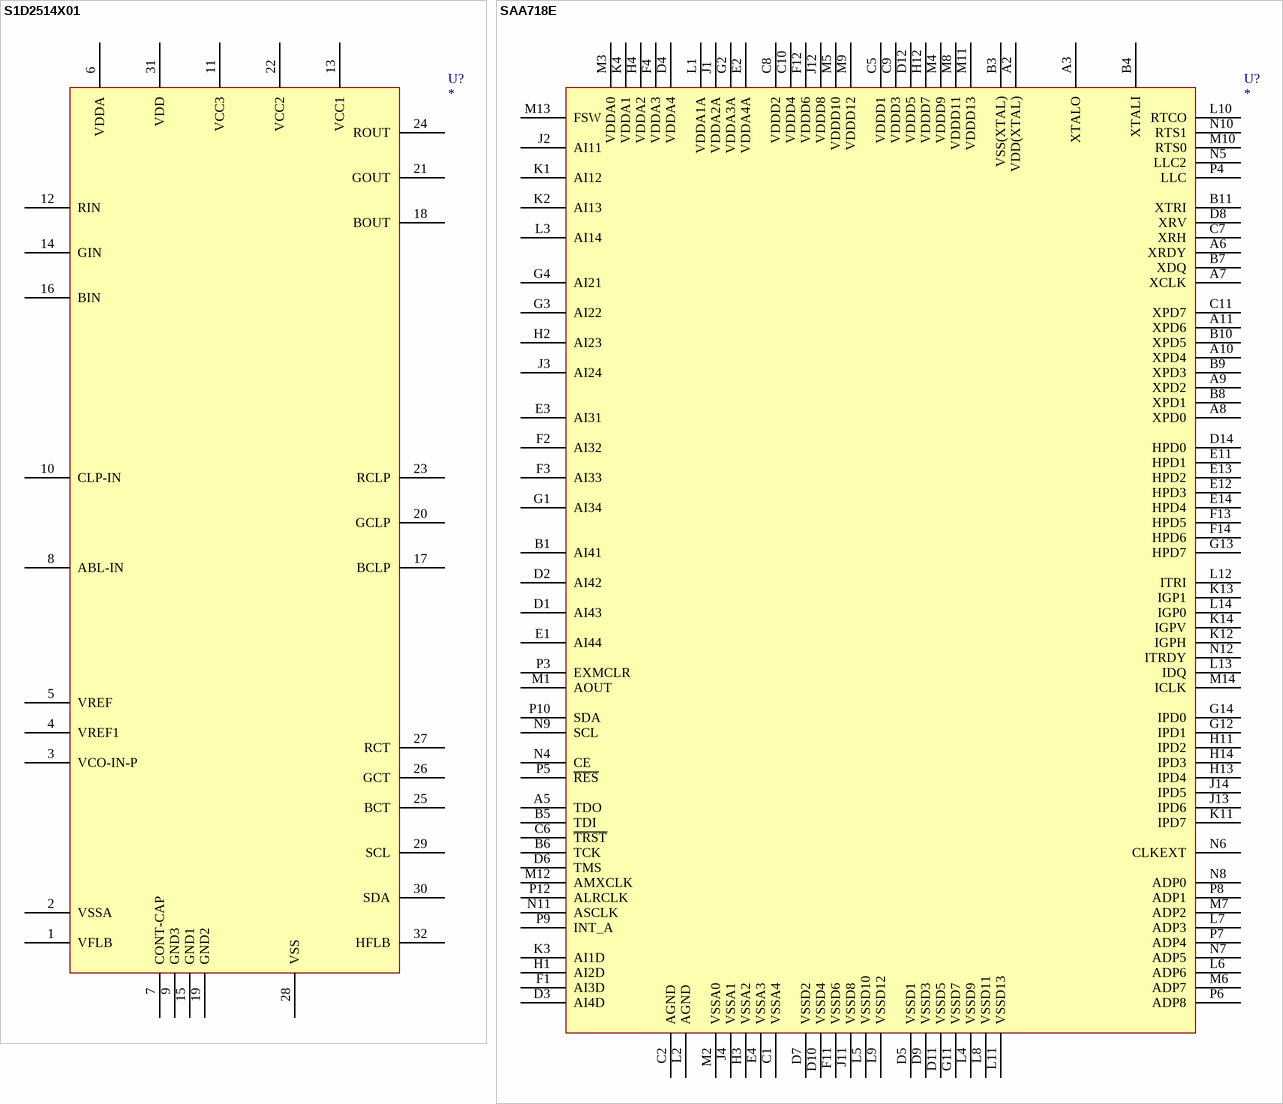
[diagram p47: symbols S1D2514X01 to SAA718E]

## S1D2514X01
designator U?
pins: 1 VFLB, 2 VSSA, 3 VCO-IN-P, 4 VREF1, 5 VREF, 6 VDDA, 7 CONT-CAP, 8 ABL-IN, 9 GND3, 10 CLP-IN, 11 VCC3, 12 RIN, 13 VCC1, 14 GIN, 15 GND1, 16 BIN, 17 BCLP, 18 BOUT, 19 GND2, 20 GCLP, 21 GOUT, 22 VCC2, 23 RCLP, 24 ROUT, 25 BCT, 26 GCT, 27 RCT, 28 VSS, 29 SCL, 30 SDA, 31 VDD, 32 HFLB

## SAA718E
designator U?
footprint BGA156X14
pins: A2 VDD(XTAL), A3 XTALO, A5 TDO, A6 XRDY, A7 XCLK, A8 XPD0, A9 XPD2, A10 XPD4, A11 XPD6, B1 AI41, B3 VSS(XTAL), B4 XTALI, B5 TDI, B6 TCK, B7 XDQ, B8 XPD1, B9 XPD3, B10 XPD5, B11 XTRI, C1 VSSA4, C2 AGND, C5 VDDD1, C6 ~{TRST}, C7 XRH, C8 VDDD2, C9 VDDD3, C10 VDDD4, C11 XPD7, D1 AI43, D2 AI42, D3 AI4D, D4 VDDA4, D5 VSSD1, D6 TMS, D7 VSSD2, D8 XRV, D9 VSSD3, D10 VSSD4, D11 VSSD5, D12 VDDD5, D14 HPD0, E1 AI44, E2 VDDA4A, E3 AI31, E4 VSSA3, E11 HPD1, E12 HPD3, E13 HPD2, E14 HPD4, F1 AI3D, F2 AI32, F3 AI33, F4 VDDA3, F11 VSSD6, F12 VDDD6, F13 HPD5, F14 HPD6, G1 AI34, G2 VDDA3A, G3 AI22, G4 AI21, G11 VSSD7, G12 IPD1, G13 HPD7, G14 IPD0, H1 AI2D, H2 AI23, H3 VSSA2, H4 VDDA2, H11 IPD2, H12 VDDD7, H13 IPD4, H14 IPD3, J1 VDDA2A, J2 AI11, J3 AI24, J4 VSSA1, J11 VSSD8, J12 VDDD8, J13 IPD6, J14 IPD5, K1 AI12, K2 AI13, K3 AI1D, K4 VDDA1, K11 IPD7, K12 IGPH, K13 IGP1, K14 IGPV, L1 VDDA1A, L2 AGND, L3 AI14, L4 VSSD9, L5 VSSD10, L6 ADP6, L7 ADP3, L8 VSSD11, L9 VSSD12, L10 RTCO, L11 VSSD13, L12 ITRI, L13 IDQ, L14 IGP0, M1 AOUT, M2 VSSA0, M3 VDDA0, M4 VDDD9, M5 VDDD10, M6 ADP7, M7 ADP2, M8 VDDD11, M9 VDDD12, M10 RTS0, M11 VDDD13, M12 AMXCLK, M13 FSW, M14 ICLK, N4 CE, N5 LLC2, N6 CLKEXT, N7 ADP5, N8 ADP0, N9 SCL, N10 RTS1, N11 ASCLK, N12 ITRDY, P3 EXMCLR, P4 LLC, P5 ~{RES}, P6 ADP8, P7 ADP4, P8 ADP1, P9 INT_A, P10 SDA, P12 ALRCLK

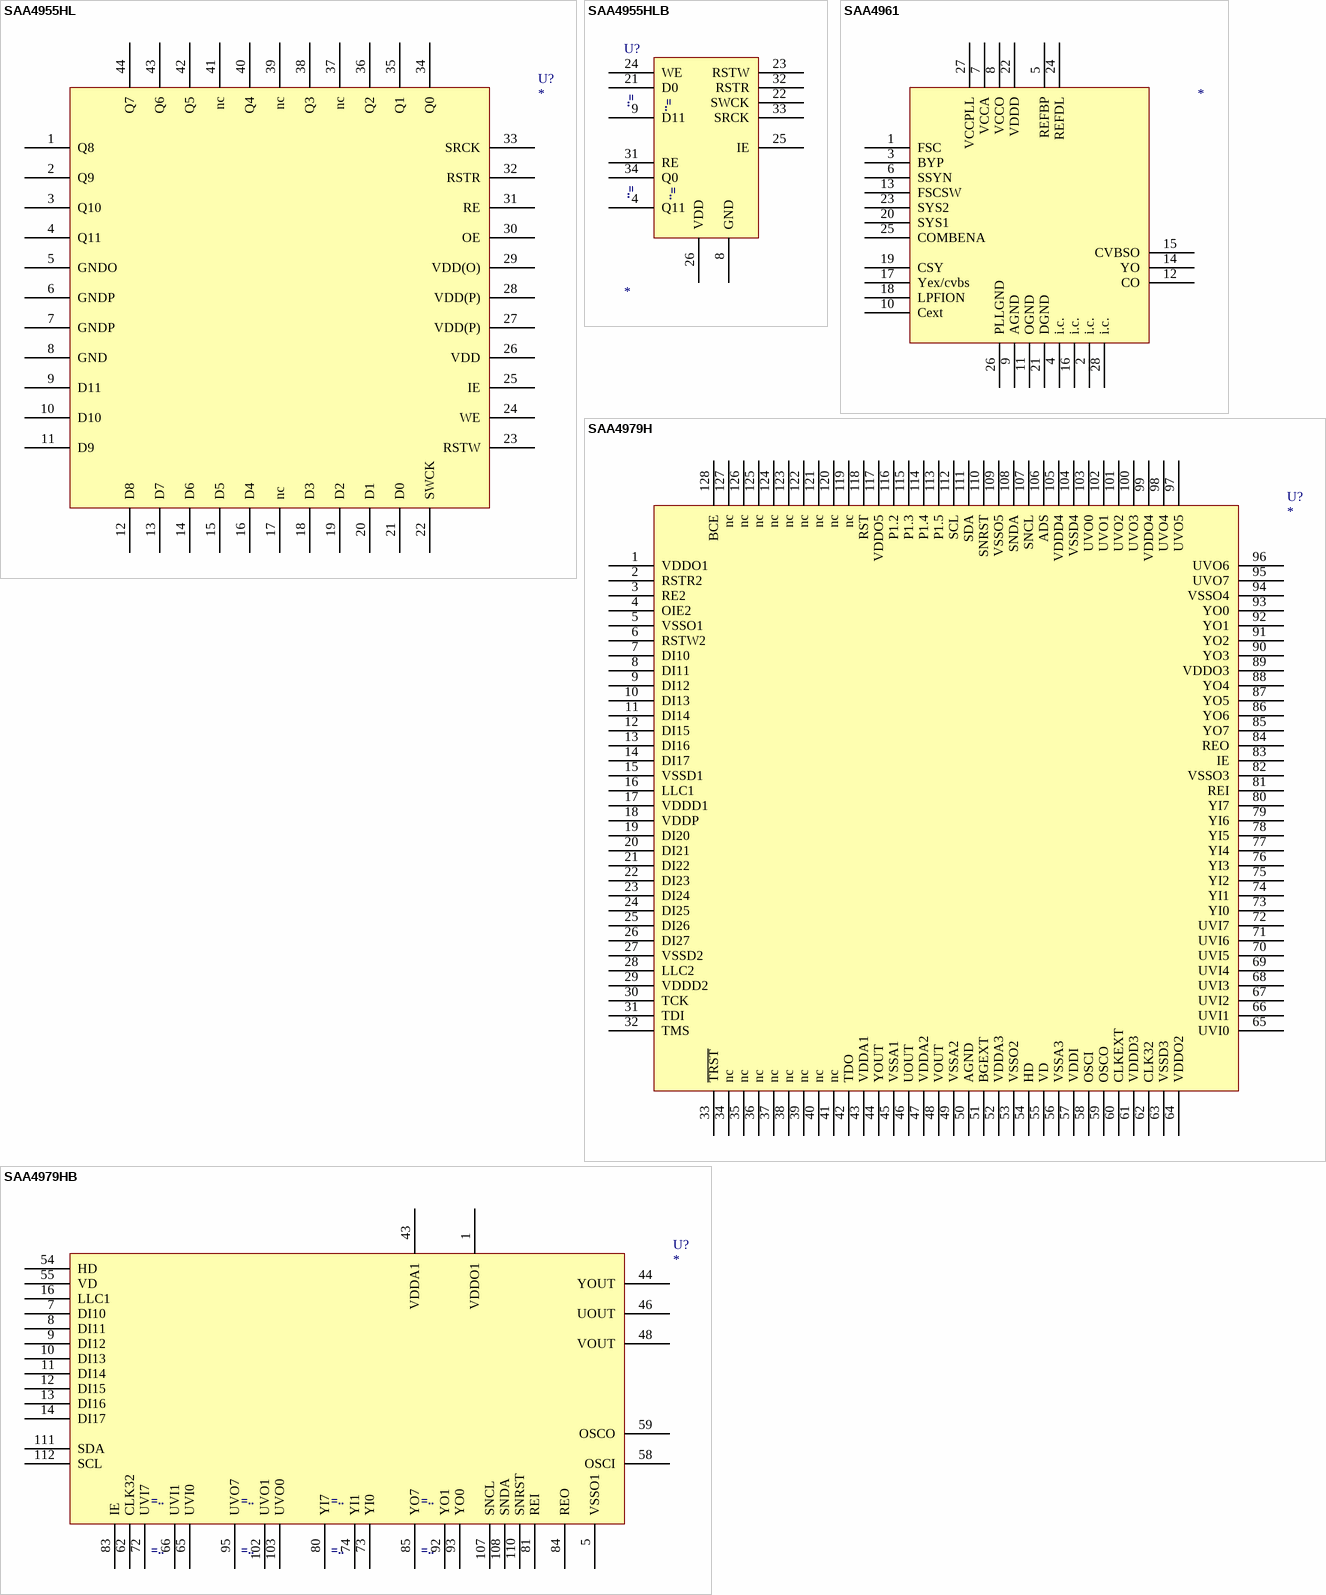
[diagram p48: symbols SAA4955HL to SAA4979HB]

## SAA4955HL
designator U?
footprint LQFP44
pins: 1 Q8, 2 Q9, 3 Q10, 4 Q11, 5 GNDO, 6 GNDP, 7 GNDP, 8 GND, 9 D11, 10 D10, 11 D9, 12 D8, 13 D7, 14 D6, 15 D5, 16 D4, 17 nc, 18 D3, 19 D2, 20 D1, 21 D0, 22 SWCK, 23 RSTW, 24 WE, 25 IE, 26 VDD, 27 VDD(P), 28 VDD(P), 29 VDD(O), 30 OE, 31 RE, 32 RSTR, 33 SRCK, 34 Q0, 35 Q1, 36 Q2, 37 nc, 38 Q3, 39 nc, 40 Q4, 41 nc, 42 Q5, 43 Q6, 44 Q7

## SAA4955HLB
designator U?
footprint LQFP44
pins: 4 Q11, 8 GND, 9 D11, 21 D0, 22 SWCK, 23 RSTW, 24 WE, 25 IE, 26 VDD, 31 RE, 32 RSTR, 33 SRCK, 34 Q0

## SAA4961
designator ?
pins: 1 FSC, 2 i.c., 3 BYP, 4 i.c., 5 REFBP, 6 SSYN, 7 VCCA, 8 VCCO, 9 AGND, 10 Cext, 11 OGND, 12 CO, 13 FSCSW, 14 YO, 15 CVBSO, 16 i.c., 17 Yex/cvbs, 18 LPFION, 19 CSY, 20 SYS1, 21 DGND, 22 VDDD, 23 SYS2, 24 REFDL, 25 COMBENA, 26 PLLGND, 27 VCCPLL, 28 i.c.